# Altium schematic symbol library Module.SchLib: 74 symbols (part 1 of 2)
Pins are listed as number, name and electrical type; pins without a type are passive.

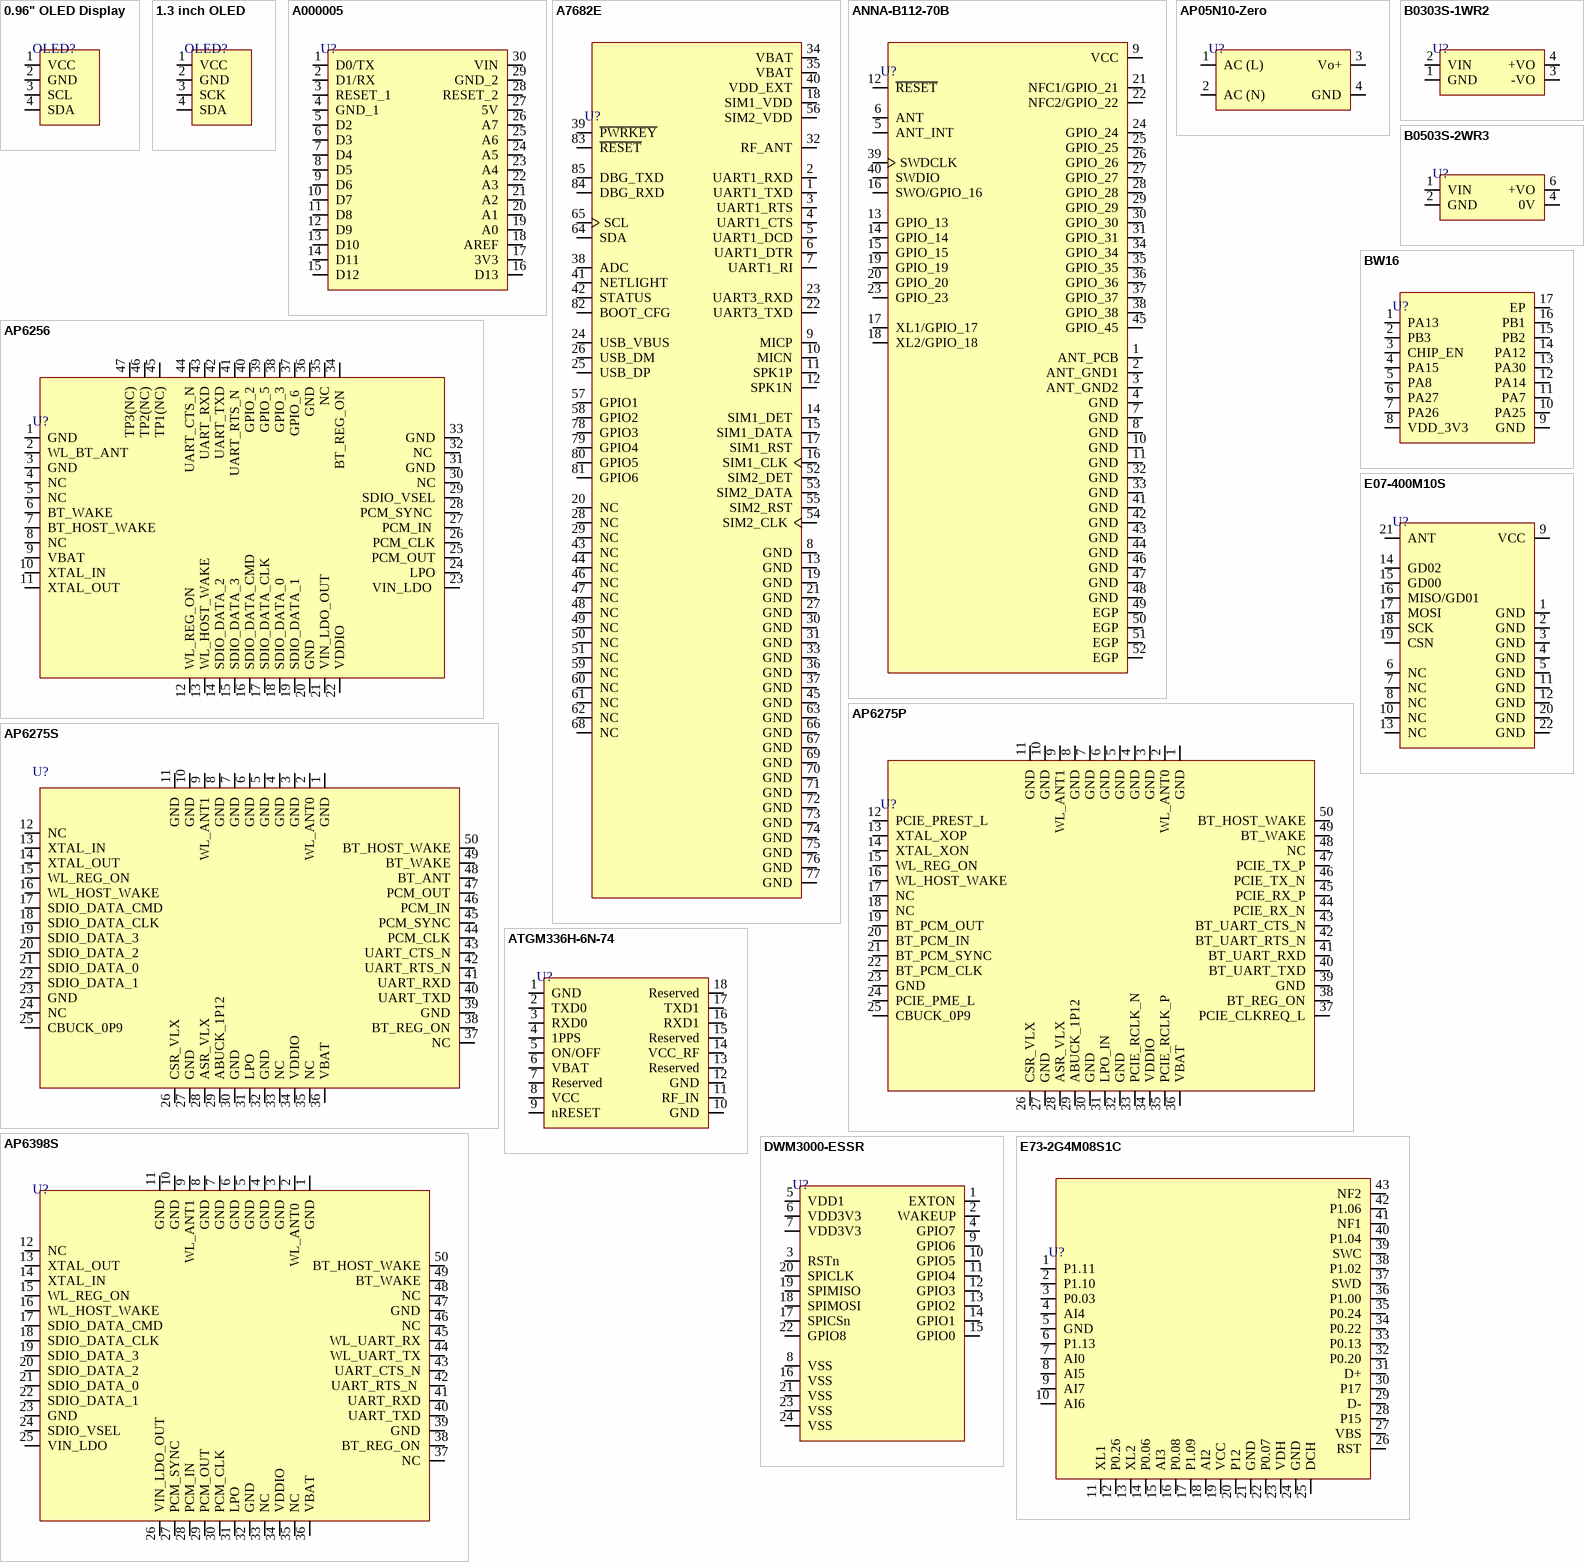
[diagram p0: symbols 0.96" OLED Display to E73-2G4M08S1C]

## 0.96" OLED Display
designator OLED?
I2C OLED Display 0.96 Inch IIC Serial LCD LED Module SSD1306 128 64 for Arduino with 40 Pcs Dupont Wire; Manufacturer Part Number: 0.96" OLED Display; Item Type: OLED; ComponentLink1Description: Aliexpress; ComponentLink1URL: https://vi.aliexpress.com/item/1005007145622546.html?spm=a2g0o.productlist.main.31.191ecGg5cGg5Vo&algo_pvid=734ed015-5a8d-442c-8838-5fb60f8c4b05&algo_exp_id=734ed015-5a8d-442c-8838-5fb60f8c4b05-15&pdp_npi=4%40dis%21USD%213.94%213.94%21%21%213.94%213.94%21%402140fc6217271814451083433ed7cc%2112000039574429519%21sea%21PK%214250221299%21ABX&curPageLogUid=5D6FHinni0Dx&utparam-url=scene%3Asearch%7Cquery_from%3A&_gl=1*we3vq3*_gcl_aw*R0NMLjE3MjE4MTcxNTQuQ2p3S0NBand6SUsxQmhBdUVpd0FIUW1VM3MxZTJwekJsSnhYVTZ1clpiVGsxRUZMR0dENnRtenFmamZ3OHkwcXE1cWZubWlHVnVlT05Cb0NySlVRQXZEX0J3RQ..*_gcl_au*MTUzMTk4MjEwNy4xNzI0MjUyNTQ2*_ga*NTU5MzcyNzE2LjE2NzUyNjE4NTc.*_ga_VED1YSGNC7*MTcyNzE4MTA3OS4yMDYuMS4xNzI3MTgxNDQ5LjYwLjAuMA..
footprint 0.96" OLED
pins: 1 VCC, 2 GND, 3 SCL, 4 SDA

## 1.3 inch OLED
designator OLED?
1.3 inch I2C OLED Display 128x64 - Blue/Black; Manufacturer: Robolink; Manufacturer Part Number: 1.3 inch OLED; Item Type: OLED Display
footprint 1.3" inch OLED
pins: 1 VCC, 2 GND, 3 SCK, 4 SDA

## A000005
designator U?
ARDUINO NANO ATMEGA328 EVAL BRD; Manufacturer Part Number: A000005; Item Type: Module; Frequency: 16MHz; Memory Format: 4498,11064MemoryType; Max Supply Voltage: 12V; Memory Size: 32KB; Min Supply Voltage: 7V; Nominal Supply Current: 19mA; Number of I/Os: 22NUMBER; Supplier: Digikey; Supplier Part Number: 1050-1001-ND; Manufacturer: Arduino; RoHS: Yes; Stock: 2276; Pricing: 1=24.9 (USD); ComponentLink1URL: https://datasheet.ciiva.com/1414/810078-1414124.pdf?src-supplier=Newark; ComponentLink1Description: https://datasheet.ciiva.com/1414/810078-1414124.pdf?src-supplier=Newark; ComponentLink2URL: https://datasheet.ciiva.com/4926/arduino-arduinoboardnano-188748-4926316.pdf?src-supplier=Mouser; ComponentLink2Description: https://datasheet.ciiva.com/4926/arduino-arduinoboardnano-188748-4926316.pdf?src-supplier=Mouser; ComponentLink3URL: https://datasheet.ciiva.com/2398/arduinonanomanual23-2398236.pdf?src-supplier=Digikey; ComponentLink3Description: https://datasheet.ciiva.com/2398/arduinonanomanual23-2398236.pdf?src-supplier=Digikey; ComponentLink4URL: https://datasheet.ciiva.com/1336/1682238-1336473.pdf?src-supplier=Element14; ComponentLink4Description: https://datasheet.ciiva.com/1336/1682238-1336473.pdf?src-supplier=Element14; ComponentLink5URL: https://datasheet.ciiva.com/19455/2121148-19455443.pdf?src-supplier=Jameco; ComponentLink5Description: https://datasheet.ciiva.com/19455/2121148-19455443.pdf?src-supplier=Jameco
footprint A000005
pins: 1 D0/TX, 2 D1/RX, 3 RESET_1, 4 GND_1, 5 D2, 6 D3, 7 D4, 8 D5, 9 D6, 10 D7, 11 D8, 12 D9, 13 D10, 14 D11, 15 D12, 16 D13, 17 3V3, 18 AREF, 19 A0, 20 A1, 21 A2, 22 A3, 23 A4, 24 A5, 25 A6, 26 A7, 27 5V, 28 RESET_2, 29 GND_2, 30 VIN

## A7682E
designator U?
LGA-85_19.6x19.6x1.10P RF Modules ROHS; Manufacturer: SIMCom Wireless Solutions; Manufacturer Part Number: A7682E; Item Type: Module; Package: LGA-85_19.6x19.6x1.10P; LCSC Part Number: C5362858; ComponentLink1Description: LCSC; ComponentLink1URL: https://www.lcsc.com/product-detail/RF-Modules_SIMCom-Wireless-Solutions-A7682E_C5362858.html
footprint A7682E
pins: 1 UART1_TXD, 2 UART1_RXD, 3 UART1_RTS, 4 UART1_CTS, 5 UART1_DCD, 6 UART1_DTR, 7 UART1_RI, 8 GND, 9 MICP, 10 MICN, 11 SPK1P, 12 SPK1N, 13 GND, 14 SIM1_DET, 15 SIM1_DATA, 16 SIM1_CLK, 17 SIM1_RST, 18 SIM1_VDD, 19 GND, 20 NC, 21 GND, 22 UART3_TXD, 23 UART3_RXD, 24 USB_VBUS, 25 USB_DP, 26 USB_DM, 27 GND, 28 NC, 29 NC, 30 GND, 31 GND, 32 RF_ANT, 33 GND, 34 VBAT, 35 VBAT, 36 GND, 37 GND, 38 ADC, 39 ~{PWRKEY}, 40 VDD_EXT, 41 NETLIGHT, 42 STATUS, 43 NC, 44 NC, 45 GND, 46 NC, 47 NC, 48 NC, 49 NC, 50 NC, 51 NC, 52 SIM2_DET, 53 SIM2_DATA, 54 SIM2_CLK, 55 SIM2_RST, 56 SIM2_VDD, 57 GPIO1, 58 GPIO2, 59 NC, 60 NC, 61 NC, 62 NC, 63 GND, 64 SDA, 65 SCL, 66 GND, 67 GND, 68 NC, 69 GND, 70 GND, 71 GND, 72 GND, 73 GND, 74 GND, 75 GND, 76 GND, 77 GND, 78 GPIO3, 79 GPIO4, 80 GPIO5, 81 GPIO6, 82 BOOT_CFG, 83 ~{RESET}, 84 DBG_RXD, 85 DBG_TXD

## ANNA-B112-70B
designator U?
RF TXRX MOD BLUETOOTH CHIP SMD; Manufacturer: u-blox; Manufacturer Part Number: ANNA-B112-70B; Item Type: Module; Supplier: Mouser; LCSC Part Number: C5451782; RoHS: No; Stock: 1511; Pricing: 1=7.09, 10=7.09, 50=7.09, 100=7.09, 1000=7.09, 10000=7.09 (USD)
footprint ANNA-B112-70B
pins: 1 ANT_PCB, 2 ANT_GND1, 3 ANT_GND2, 4 GND, 5 ANT_INT, 6 ANT, 7 GND, 8 GND, 9 VCC, 10 GND, 11 GND, 12 ~{RESET}, 13 GPIO_13, 14 GPIO_14, 15 GPIO_15, 16 SWO/GPIO_16, 17 XL1/GPIO_17, 18 XL2/GPIO_18, 19 GPIO_19, 20 GPIO_20, 21 NFC1/GPIO_21, 22 NFC2/GPIO_22, 23 GPIO_23, 24 GPIO_24, 25 GPIO_25, 26 GPIO_26, 27 GPIO_27, 28 GPIO_28, 29 GPIO_29, 30 GPIO_30, 31 GPIO_31, 32 GND, 33 GND, 34 GPIO_34, 35 GPIO_35, 36 GPIO_36, 37 GPIO_37, 38 GPIO_38, 39 SWDCLK, 40 SWDIO, 41 GND, 42 GND, 43 GND, 44 GND, 45 GPIO_45, 46 GND, 47 GND, 48 GND, 49 EGP, 50 EGP, 51 EGP, 52 EGP

## AP05N10-Zero
designator U?
5V 85VAC~265VAC 2000mA 100V~370V 10W AC/DC-DC 80% Plugin Power Modules ROHS; Manufacturer: HIECUBE; Manufacturer Part Number: AP05N10-Zero; Package: Plugin; LCSC Part Number: C355011; Item Type: Power Module; ComponentLink1Description: LCSC; ComponentLink1URL: https://www.lcsc.com/product-detail/Power-Modules_HIECUBE-AP05N10-Zero_C355011.html
footprint AP05N10-Zero
pins: 1 AC (L), 2 AC (N), 3 Vo+, 4 GND

## AP6256
designator U?
802.11ac/a/b/g/n WiFi Combo Sip Module (WiFi 5), 1T1R; Manufacturer: SparkLan; Manufacturer Part Number: AP6256; Item Type: IC; Footprint: Custom; ComponentLink1Description: Sparklan; ComponentLink1URL: https://www.sparklan.com/product/ap6256-broadcom-bcm43435-sip-module/
footprint AP6256_
pins: 1 GND, 2 WL_BT_ANT, 3 GND, 4 NC, 5 NC, 6 BT_WAKE , 7 BT_HOST_WAKE, 8 NC, 9 VBAT, 10 XTAL_IN , 11 XTAL_OUT, 12 WL_REG_ON, 13 WL_HOST_WAKE, 14 SDIO_DATA_2, 15 SDIO_DATA_3, 16 SDIO_DATA_CMD, 17 SDIO_DATA_CLK, 18 SDIO_DATA_0, 19 SDIO_DATA_1, 20 GND, 21 VIN_LDO_OUT, 22 VDDIO, 23 VIN_LDO , 24 LPO, 25 PCM_OUT, 26 PCM_CLK, 27 PCM_IN , 28 PCM_SYNC , 29 SDIO_VSEL, 30 NC, 31 GND, 32 NC , 33 GND, 34 BT_REG_ON , 35 NC, 36 GND, 37 GPIO_6 , 38 GPIO_3, 39 GPIO_5, 40 GPIO_2, 41 UART_RTS_N , 42 UART_TXD, 43 UART_RXD, 44 UART_CTS_N, 45 TP1(NC), 46 TP2(NC), 47 TP3(NC)

## AP6275P
designator U?
-90dBm 16dBm 2.4GHz - WiFi Modules ROHS; Manufacturer: AMPAK Tech; Manufacturer Part Number: AP6275P; Item Type: Module; Package: Custom; LCSC Part Number: C2984107; ComponentLink1Description: LCSC; ComponentLink1URL: https://www.lcsc.com/product-detail/WiFi-Modules_AMPAK-Tech-AP6275P_C2984107.html
footprint AP6275P_
pins: 1 GND, 2 WL_ANT0, 3 GND, 4 GND, 5 GND, 6 GND, 7 GND, 8 GND, 9 WL_ANT1, 10 GND, 11 GND, 12 PCIE_PREST_L, 13 XTAL_XOP, 14 XTAL_XON, 15 WL_REG_ON, 16 WL_HOST_WAKE, 17 NC, 18 NC, 19 BT_PCM_OUT, 20 BT_PCM_IN, 21 BT_PCM_SYNC, 22 BT_PCM_CLK, 23 GND, 24 PCIE_PME_L, 25 CBUCK_0P9, 26 CSR_VLX, 27 GND, 28 ASR_VLX, 29 ABUCK_1P12, 30 GND, 31 LPO_IN, 32 GND, 33 PCIE_RCLK_N, 34 VDDIO, 35 PCIE_RCLK_P, 36 VBAT, 37 PCIE_CLKREQ_L, 38 BT_REG_ON, 39 GND, 40 BT_UART_TXD, 41 BT_UART_RXD, 42 BT_UART_RTS_N, 43 BT_UART_CTS_N, 44 PCIE_RX_N, 45 PCIE_RX_P, 46 PCIE_TX_N, 47 PCIE_TX_P, 48 NC, 49 BT_WAKE, 50 BT_HOST_WAKE

## AP6275S
designator U?
-86dBm 14dBm 2.4GHz - WiFi Modules ROHS; Manufacturer: AMPAK Tech; Manufacturer Part Number: AP6275S; Item Type: Module; Package: Custom; LCSC Part Number: C2918717; ComponentLink1Description: LCSC; ComponentLink1URL: https://www.lcsc.com/product-detail/WiFi-Modules_AMPAK-Tech-AP6275S_C2918717.html
footprint AP6275S_
pins: 1 GND, 2 WL_ANT0, 3 GND, 4 GND, 5 GND, 6 GND, 7 GND, 8 GND, 9 WL_ANT1, 10 GND, 11 GND, 12 NC, 13 XTAL_IN, 14 XTAL_OUT, 15 WL_REG_ON, 16 WL_HOST_WAKE, 17 SDIO_DATA_CMD, 18 SDIO_DATA_CLK, 19 SDIO_DATA_3, 20 SDIO_DATA_2, 21 SDIO_DATA_0, 22 SDIO_DATA_1, 23 GND, 24 NC, 25 CBUCK_0P9, 26 CSR_VLX, 27 GND, 28 ASR_VLX, 29 ABUCK_1P12, 30 GND, 31 LPO, 32 GND, 33 NC, 34 VDDIO, 35 NC, 36 VBAT, 37 NC, 38 BT_REG_ON, 39 GND, 40 UART_TXD, 41 UART_RXD, 42 UART_RTS_N, 43 UART_CTS_N, 44 PCM_CLK, 45 PCM_SYNC, 46 PCM_IN, 47 PCM_OUT, 48 BT_ANT, 49 BT_WAKE, 50 BT_HOST_WAKE

## AP6398S
designator U?
802.11ac/a/b/g/n 2x2 WiFi with Bluetooth5.0 Combo SIP Module; Manufacturer: SparkLAN; Manufacturer Part Number: AP6398S; Item Type: IC; Footprint: Custom; ComponentLink1Description: Verical; ComponentLink1URL: https://www.verical.com/pd/sparklan-communicationslnc.-combo-wireless-module-ap6398s-7079266?utm_medium=datasheet&utm_source=pdf&utm_content=link&utm_term=AP6398S&utm_campaign=datasheet_coverpage_2017
footprint AP6398S_
pins: 1 GND, 2 WL_ANT0 , 3 GND, 4 GND, 5 GND, 6 GND, 7 GND, 8 GND, 9 WL_ANT1, 10 GND, 11 GND, 12 NC, 13 XTAL_OUT, 14 XTAL_IN, 15 WL_REG_ON , 16 WL_HOST_WAKE, 17 SDIO_DATA_CMD, 18 SDIO_DATA_CLK , 19 SDIO_DATA_3, 20 SDIO_DATA_2, 21 SDIO_DATA_0, 22 SDIO_DATA_1, 23 GND, 24 SDIO_VSEL , 25 VIN_LDO, 26 VIN_LDO_OUT, 27 PCM_SYNC , 28 PCM_IN, 29 PCM_OUT, 30 PCM_CLK , 31 LPO , 32 GND, 33 NC, 34 VDDIO , 35 NC, 36 VBAT , 37 NC, 38 BT_REG_ON, 39 GND, 40 UART_TXD, 41 UART_RXD, 42 UART_RTS_N , 43 UART_CTS_N, 44 WL_UART_TX, 45 WL_UART_RX, 46 NC, 47 GND, 48 NC, 49 BT_WAKE, 50 BT_HOST_WAKE

## ATGM336H-6N-74
designator U?
SMD,10.1x9.7mm Satellite Positioning Modules ROHS; Manufacturer: ZHONGKEWEI; Manufacturer Part Number: ATGM336H-6N-74; Package: SMD,10.1x9.7mm; LCSC Part Number: C5804601; ComponentLink1Description: LCSC; ComponentLink1URL: https://www.lcsc.com/product-detail/Satellite-Positioning-Modules_ZHONGKEWEI-ATGM336H-6N-74_C5804601.html
footprint ATGM336H-6N-74
pins: 1 GND, 2 TXD0, 3 RXD0, 4 1PPS, 5 ON/OFF, 6 VBAT, 7 Reserved, 8 VCC, 9 nRESET, 10 GND, 11 RF_IN, 12 GND, 13 Reserved, 14 VCC_RF, 15 Reserved, 16 RXD1, 17 TXD1, 18 Reserved

## B0303S-1WR2
designator U?
Plugin Isolated Power Modules ROHS; Manufacturer: YLPTEC; Manufacturer Part Number: B0303S-1WR2; Package: Plugin; LCSC Part Number: C2992399; Item Type: Power Module; ComponentLink1Description: LCSC; ComponentLink1URL: https://www.lcsc.com/product-detail/Isolated-Power-Modules_YLPTEC-B0303S-1WR2_C2992399.html
footprint B0303S-1WR2
pins: 1 GND, 2 VIN, 3 -VO, 4 +VO

## B0503S-2WR3
designator U?
SIP-4 Isolated Power Modules ROHS; Manufacturer: YLPTEC; Manufacturer Part Number: B0503S-2WR3; Item Type: Module; Package: SIP-4; LCSC Part Number: C5369472; ComponentLink1Description: LCSC; ComponentLink1URL: https://www.lcsc.com/product-detail/Isolated-Power-Modules_YLPTEC-B0503S-2WR3_C5369472.html?s_z=n_B0503S-2WR3
footprint B0503S-2WR3
pins: 1 VIN, 2 GND, 4 0V, 6 +VO

## BW16
designator U?
-90dBm 16dBm RTL8720DN Chip On-Board PCB Antenna 2.4GHz SMD,16x24mm WiFi Modules ROHS; Manufacturer: Ai-Thinker; Manufacturer Part Number: BW16; Package: SMD,16x24mm; LCSC Part Number: C2764067; Item Type: WiFi Module; ComponentLink1Description: LCSC; ComponentLink1URL: https://www.lcsc.com/product-detail/WiFi-Modules_Ai-Thinker-BW16_C2764067.html
footprint BW16
pins: 1 PA13, 2 PB3, 3 CHIP_EN, 4 PA15, 5 PA8, 6 PA27, 7 PA26, 8 VDD_3V3, 9 GND, 10 PA25, 11 PA7, 12 PA14, 13 PA30, 14 PA12, 15 PB2, 16 PB1, 17 EP

## DWM3000-ESSR
designator U?
RF Modules ENGINEERING SAMPLE; Manufacturer: Qorvo; Manufacturer Part Number: DWM3000-ESSR; Item Type: Module; Supplier 1: Mouser; Stock 1: 282; Pricing 1: 1=24, 10=24, 25=19.44, 50=19.44, 100=14.9, 1000=14.9, 10000=14.9 (USD); Supplier Part Number 1: 772-DWM3000-ESSR; ComponentLink1Description: LCSC; ComponentLink1URL: https://eu.mouser.com/ProductDetail/Qorvo/DWM3000-ESSR?qs=DPoM0jnrROUKQ7mLMYYEbQ%3D%3D
footprint DWM3000_ESSR
pins: 1 EXTON, 2 WAKEUP, 3 RSTn, 4 GPIO7, 5 VDD1, 6 VDD3V3, 7 VDD3V3, 8 VSS, 9 GPIO6, 10 GPIO5, 11 GPIO4, 12 GPIO3, 13 GPIO2, 14 GPIO1, 15 GPIO0, 16 VSS, 17 SPICSn, 18 SPIMOSI, 19 SPIMISO, 20 SPICLK, 21 VSS, 22 GPIO8, 23 VSS, 24 VSS

## E07-400M10S
designator U?
RF Modules ROHS; Manufacturer: Chengdu Ebyte Elec Tech; Manufacturer Part Number: E07-400M10S; Item Type: Module; Package: Custom; LCSC Part Number: C2965513; ComponentLink1Description: LCSC; ComponentLink1URL: https://www.lcsc.com/product-detail/RF-Modules_Chengdu-Ebyte-Elec-Tech-E07-400M10S_C2965513.html
footprint E07-400M10S
pins: 1 GND, 2 GND, 3 GND, 4 GND, 5 GND, 6 NC, 7 NC, 8 NC, 9 VCC, 10 NC, 11 GND, 12 GND, 13 NC, 14 GD02, 15 GD00, 16 MISO/GD01, 17 MOSI, 18 SCK, 19 CSN, 20 GND, 21 ANT, 22 GND

## E73-2G4M08S1C
designator U?
Bluetooth Modules ROHS; Manufacturer: Chengdu Ebyte Elec Tech; Manufacturer Part Number: E73-2G4M08S1C; Item Type: Module; Package: Custom; LCSC Part Number: C356849; ComponentLink1Description: LCSC; ComponentLink1URL: https://www.lcsc.com/product-detail/Bluetooth-Modules_Chengdu-Ebyte-Elec-Tech-E73-2G4M08S1C_C356849.html?s_z=n_E73-2G4M08S1C
footprint E73-2G4M08S1C
pins: 1 P1.11, 2 P1.10, 3 P0.03, 4 AI4, 5 GND, 6 P1.13, 7 AI0, 8 AI5, 9 AI7, 10 AI6, 11 XL1, 12 P0.26, 13 XL2, 14 P0.06, 15 AI3, 16 P0.08, 17 P1.09, 18 AI2, 19 VCC, 20 P12, 21 GND, 22 P0.07, 23 VDH, 24 GND, 25 DCH, 26 RST, 27 VBS, 28 P15, 29 D-, 30 P17, 31 D+, 32 P0.20, 33 P0.13, 34 P0.22, 35 P0.24, 36 P1.00, 37 SWD, 38 P1.02, 39 SWC, 40 P1.04, 41 NF1, 42 P1.06, 43 NF2

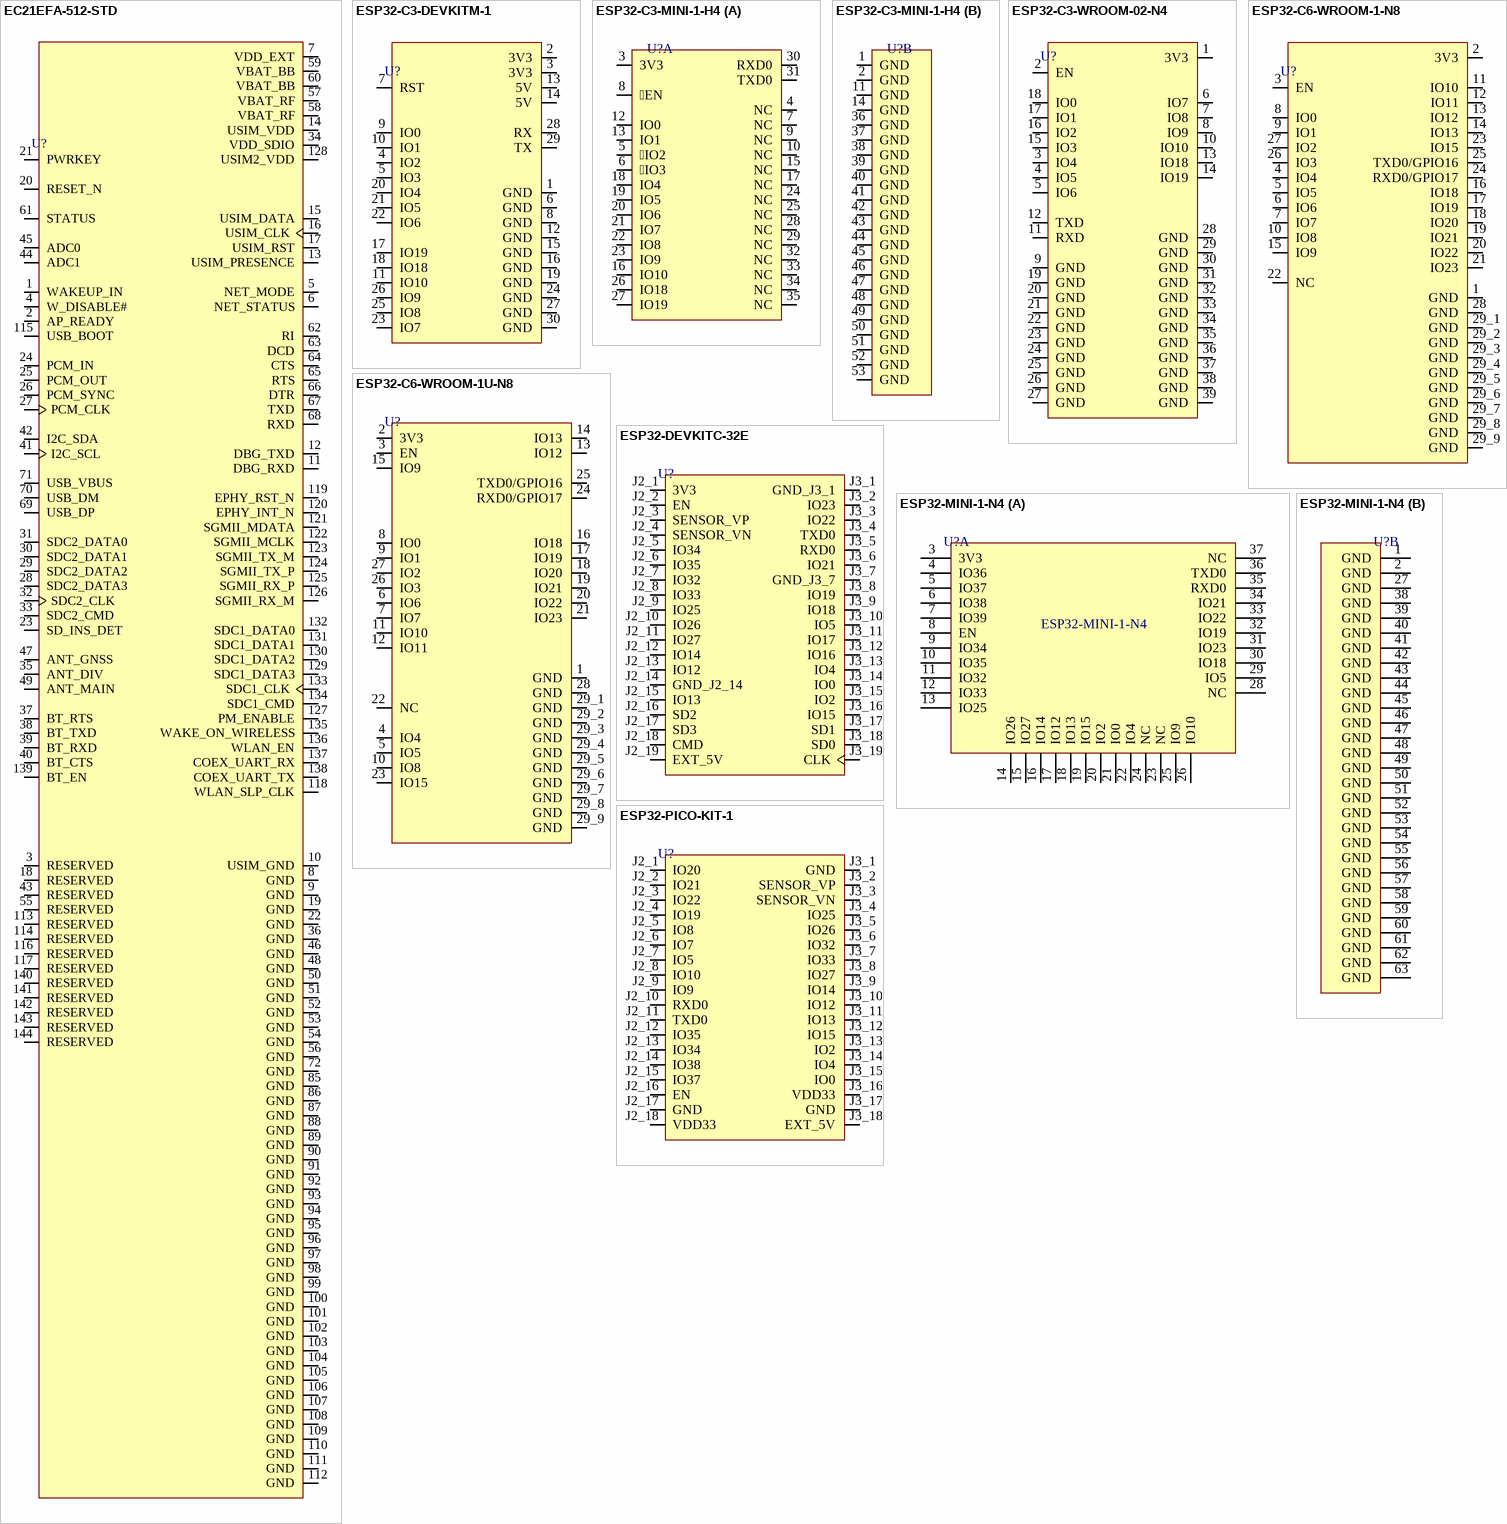
[diagram p1: symbols EC21EFA-512-STD to ESP32-PICO-KIT-1]

## EC21EFA-512-STD
designator U?
RF TXRX MOD CELLULARCARD EDGE; Manufacturer: Quectel Wireless Solutions; Manufacturer Part Number: EC21EFA-512-STD; Item Type: IC; Supplier: Mouser; Supplier Part Number: 277-EC21EFA-512-STD; RoHS: No; Stock: 210; Pricing: 1=59.46, 10=47.77, 50=42.24, 100=40.31, 1000=38.16, 10000=38.16 (USD); ComponentLink1URL: https://datasheet.octopart.com/EC21EFA-512-STD-Quectel-datasheet-163886073.pdf?src-supplier=SOS+electronic; ComponentLink1Description: https://datasheet.octopart.com/EC21EFA-512-STD-Quectel-datasheet-163886073.pdf?src-supplier=SOS+electronic
footprint EC21EFA-512-STD
pins: 1 WAKEUP_IN, 2 AP_READY, 3 RESERVED, 4 W_DISABLE#, 5 NET_MODE, 6 NET_STATUS, 7 VDD_EXT, 8 GND, 9 GND, 10 USIM_GND, 11 DBG_RXD, 12 DBG_TXD, 13 USIM_PRESENCE, 14 USIM_VDD, 15 USIM_DATA, 16 USIM_CLK, 17 USIM_RST, 18 RESERVED, 19 GND, 20 RESET_N, 21 PWRKEY, 22 GND, 23 SD_INS_DET, 24 PCM_IN, 25 PCM_OUT, 26 PCM_SYNC, 27 PCM_CLK, 28 SDC2_DATA3, 29 SDC2_DATA2, 30 SDC2_DATA1, 31 SDC2_DATA0, 32 SDC2_CLK, 33 SDC2_CMD, 34 VDD_SDIO, 35 ANT_DIV, 36 GND, 37 BT_RTS, 38 BT_TXD, 39 BT_RXD, 40 BT_CTS, 41 I2C_SCL, 42 I2C_SDA, 43 RESERVED, 44 ADC1, 45 ADC0, 46 GND, 47 ANT_GNSS, 48 GND, 49 ANT_MAIN, 50 GND, 51 GND, 52 GND, 53 GND, 54 GND, 55 RESERVED, 56 GND, 57 VBAT_RF, 58 VBAT_RF, 59 VBAT_BB, 60 VBAT_BB, 61 STATUS, 62 RI, 63 DCD, 64 CTS, 65 RTS, 66 DTR, 67 TXD, 68 RXD, 69 USB_DP, 70 USB_DM, 71 USB_VBUS, 72 GND, 85 GND, 86 GND, 87 GND, 88 GND, 89 GND, 90 GND, 91 GND, 92 GND, 93 GND, 94 GND, 95 GND, 96 GND, 97 GND, 98 GND, 99 GND, 100 GND, 101 GND, 102 GND, 103 GND, 104 GND, 105 GND, 106 GND, 107 GND, 108 GND, 109 GND, 110 GND, 111 GND, 112 GND, 113 RESERVED, 114 RESERVED, 115 USB_BOOT, 116 RESERVED, 117 RESERVED, 118 WLAN_SLP_CLK, 119 EPHY_RST_N, 120 EPHY_INT_N, 121 SGMII_MDATA, 122 SGMII_MCLK, 123 SGMII_TX_M, 124 SGMII_TX_P, 125 SGMII_RX_P, 126 SGMII_RX_M, 127 PM_ENABLE, 128 USIM2_VDD, 129 SDC1_DATA3, 130 SDC1_DATA2, 131 SDC1_DATA1, 132 SDC1_DATA0, 133 SDC1_CLK, 134 SDC1_CMD, 135 WAKE_ON_WIRELESS, 136 WLAN_EN, 137 COEX_UART_RX, 138 COEX_UART_TX, 139 BT_EN, 140 RESERVED, 141 RESERVED, 142 RESERVED, 143 RESERVED, 144 RESERVED

## ESP32-C3-DEVKITM-1
designator U?
ESP32-C3-MINI-1 DEV BRD; Manufacturer: Espressif Systems; Manufacturer Part Number: ESP32-C3-DEVKITM-1; Item Type: Evalution Board; Supplier: Digikey; Supplier Part Number: 1965-ESP32-C3-DEVKITM-1-ND; RoHS: No; Stock: 609; Pricing: 1=8 (USD); ComponentLink1URL: https://datasheet.octopart.com/ESP32-C3-DEVKITM-1-Espressif-Systems-datasheet-165560559.pdf?src-supplier=TME; ComponentLink1Description: https://datasheet.octopart.com/ESP32-C3-DEVKITM-1-Espressif-Systems-datasheet-165560559.pdf?src-supplier=TME
footprint ESP32-C3-DEVKITM-1
pins: 1 GND, 2 3V3, 3 3V3, 4 IO2, 5 IO3, 6 GND, 7 RST, 8 GND, 9 IO0, 10 IO1, 11 IO10, 12 GND, 13 5V, 14 5V, 15 GND, 16 GND, 17 IO19, 18 IO18, 19 GND, 20 IO4, 21 IO5, 22 IO6, 23 IO7, 24 GND, 25 IO8, 26 IO9, 27 GND, 28 RX, 29 TX, 30 GND

## ESP32-C3-MINI-1-H4
designator U?
RF TXRX MODULE BT PCB TRACE SMD; Manufacturer: Espressif Systems; Manufacturer Part Number: ESP32-C3-MINI-1-H4; Package: SMD,13.2x16.6mm; LCSC Part Number: C2934569; Item Type: Module; ComponentLink1Description: LCSC; ComponentLink1URL: https://www.lcsc.com/product-detail/WiFi-Modules_Espressif-Systems-ESP32-C3-MINI-1-H4_C2934569.html; Supplier: Digi-Key; Supplier Part Number: 1965-ESP32-C3-MINI-1-H4CT-ND; RoHS: No; Category: Uncategorized; Stock: 35793; Pricing: 1=1.9 (USD)
footprint ESP32-C3-MINI-1-H4
part A pins: 3 3V3, 4 NC, 5 IO2, 6 IO3, 7 NC, 8 EN, 9 NC, 10 NC, 12 IO0, 13 IO1, 15 NC, 16 IO10, 17 NC, 18 IO4, 19 IO5, 20 IO6, 21 IO7, 22 IO8, 23 IO9, 24 NC, 25 NC, 26 IO18, 27 IO19, 28 NC, 29 NC, 30 RXD0, 31 TXD0, 32 NC, 33 NC, 34 NC, 35 NC
part B pins: 1 GND, 2 GND, 11 GND, 14 GND, 36 GND, 37 GND, 38 GND, 39 GND, 40 GND, 41 GND, 42 GND, 43 GND, 44 GND, 45 GND, 46 GND, 47 GND, 48 GND, 49 GND, 50 GND, 51 GND, 52 GND, 53 GND

## ESP32-C3-WROOM-02-N4
designator U?
RF TXRX MOD BT WIFI PCB TH SMD; Manufacturer: Espressif Systems; Manufacturer Part Number: ESP32-C3-WROOM-02-N4; Item Type: Module; Interface: 39,40,224,1514,1518,1532Interface; Bandwidth: 72MHz; Data Rate: 150Mbps; Clock Frequency: 2.484GHz; Max Supply Voltage: 3.6V; Min Supply Voltage: 3V; Number of GPIO: 15NUMBER; Supplier: Digikey; LCSC Part Number: C2934560; RoHS: No; Pricing: 1=3.28, 10=2.836, 25=2.6796, 100=2.4652, 250=2.33652 (USD); Min Operating Temperature: -40°C; Max Operating Temperature: 85°C; Height: 3.35mm; ComponentLink1URL: https://datasheet.octopart.com/ESP32-C3-WROOM-02-N4-Espressif-Systems-datasheet-165560559.pdf?src-supplier=TME; ComponentLink1Description: https://datasheet.octopart.com/ESP32-C3-WROOM-02-N4-Espressif-Systems-datasheet-165560559.pdf?src-supplier=TME
footprint ESP32-C3-WROOM-02-N4
pins: 1 3V3, 2 EN, 3 IO4, 4 IO5, 5 IO6, 6 IO7, 7 IO8, 8 IO9, 9 GND, 10 IO10, 11 RXD, 12 TXD, 13 IO18, 14 IO19, 15 IO3, 16 IO2, 17 IO1, 18 IO0, 19 GND, 20 GND, 21 GND, 22 GND, 23 GND, 24 GND, 25 GND, 26 GND, 27 GND, 28 GND, 29 GND, 30 GND, 31 GND, 32 GND, 33 GND, 34 GND, 35 GND, 36 GND, 37 GND, 38 GND, 39 GND

## ESP32-C6-WROOM-1-N8
designator U?
RF TXRX MOD BT WIFI PCB TH SMD; Manufacturer: Espressif Systems; Manufacturer Part Number: ESP32-C6-WROOM-1-N8; Item Type: Module; Supplier: Digikey; LCSC Part Number: C5366877; RoHS: No; Stock: 1100; Pricing: 1=5.38, 10=4.66, 25=4.4084, 100=4.0625, 250=3.85516, 650=3.65551, 1300=3.52065, 1950=3.44543 (USD); ComponentLink1URL: https://datasheet.octopart.com/ESP32-C6-WROOM-1-N8-Espressif-Systems-datasheet-188867345.pdf?src-supplier=TME; ComponentLink1Description: https://datasheet.octopart.com/ESP32-C6-WROOM-1-N8-Espressif-Systems-datasheet-188867345.pdf?src-supplier=TME
footprint ESP32-C6-WROOM-1-N8
pins: 1 GND, 2 3V3, 3 EN, 4 IO4, 5 IO5, 6 IO6, 7 IO7, 8 IO0, 9 IO1, 10 IO8, 11 IO10, 12 IO11, 13 IO12, 14 IO13, 15 IO9, 16 IO18, 17 IO19, 18 IO20, 19 IO21, 20 IO22, 21 IO23, 22 NC, 23 IO15, 24 RXD0/GPIO17, 25 TXD0/GPIO16, 26 IO3, 27 IO2, 28 GND, 29_1 GND, 29_2 GND, 29_3 GND, 29_4 GND, 29_5 GND, 29_6 GND, 29_7 GND, 29_8 GND, 29_9 GND

## ESP32-C6-WROOM-1U-N8
designator U?
RF TXRX MOD BT WIFI PCB TH SMD; Manufacturer: Espressif Systems; Manufacturer Part Number: ESP32-C6-WROOM-1U-N8; Item Type: Module; Supplier: Digikey; Supplier Part Number: 1965-ESP32-C6-WROOM-1U-N8CT-ND; RoHS: No; Stock: 1394; Pricing: 1=5.43, 10=4.698, 25=4.444, 100=4.0954, 250=3.88644 (USD); ComponentLink1URL: https://datasheet.octopart.com/ESP32-C6-WROOM-1U-N8-Espressif-Systems-datasheet-188867345.pdf?src-supplier=TME; ComponentLink1Description: https://datasheet.octopart.com/ESP32-C6-WROOM-1U-N8-Espressif-Systems-datasheet-188867345.pdf?src-supplier=TME
footprint ESP32-C6-WROOM-1U-N8
pins: 1 GND, 2 3V3, 3 EN, 4 IO4, 5 IO5, 6 IO6, 7 IO7, 8 IO0, 9 IO1, 10 IO8, 11 IO10, 12 IO11, 13 IO12, 14 IO13, 15 IO9, 16 IO18, 17 IO19, 18 IO20, 19 IO21, 20 IO22, 21 IO23, 22 NC, 23 IO15, 24 RXD0/GPIO17, 25 TXD0/GPIO16, 26 IO3, 27 IO2, 28 GND, 29_1 GND, 29_2 GND, 29_3 GND, 29_4 GND, 29_5 GND, 29_6 GND, 29_7 GND, 29_8 GND, 29_9 GND

## ESP32-DEVKITC-32E
designator U?
ESP32-WROOM-32E 4MB FLASH; Manufacturer: Espressif Systems; Manufacturer Part Number: ESP32-DEVKITC-32E; Item Type: Development Kit; Frequency: 2.4GHz; Supplier: Digikey; Supplier Part Number: 1965-ESP32-DEVKITC-32E-ND; RoHS: No; Stock: 1503; Pricing: 1=10 (USD); Series: -; ComponentLink1URL: https://www.espressif.com/sites/default/files/documentation/espressif_products_ordering_information_en.pdf?src-supplier=Digikey; ComponentLink1Description: https://www.espressif.com/sites/default/files/documentation/espressif_products_ordering_information_en.pdf?src-supplier=Digikey; ComponentLink2URL: https://datasheet.octopart.com/ESP32-DEVKITC-32E-Espressif-Systems-datasheet-165560559.pdf?src-supplier=TME; ComponentLink2Description: https://datasheet.octopart.com/ESP32-DEVKITC-32E-Espressif-Systems-datasheet-165560559.pdf?src-supplier=TME
footprint ESP32-DEVKITC-32E
pins: J2_1 3V3, J2_2 EN, J2_3 SENSOR_VP, J2_4 SENSOR_VN, J2_5 IO34, J2_6 IO35, J2_7 IO32, J2_8 IO33, J2_9 IO25, J2_10 IO26, J2_11 IO27, J2_12 IO14, J2_13 IO12, J2_14 GND_J2_14, J2_15 IO13, J2_16 SD2, J2_17 SD3, J2_18 CMD, J2_19 EXT_5V, J3_1 GND_J3_1, J3_2 IO23, J3_3 IO22, J3_4 TXD0, J3_5 RXD0, J3_6 IO21, J3_7 GND_J3_7, J3_8 IO19, J3_9 IO18, J3_10 IO5, J3_11 IO17, J3_12 IO16, J3_13 IO4, J3_14 IO0, J3_15 IO2, J3_16 IO15, J3_17 SD1, J3_18 SD0, J3_19 CLK

## ESP32-MINI-1-N4
designator U?
SMD MODULE W/PCB ANT ESP-U4WDH; Manufacturer: Espressif Systems; Manufacturer Part Number: ESP32-MINI-1-N4; Supplier 1: Mouser; RoHS: No; Stock 1: 5903; Pricing 1: 1=2.48000, 10=2.48000, 50=2.48000, 100=2.48000, 1000=2.48000, 10000=2.48000 (USD); ComponentLink1Description: LCSC; ComponentLink1URL: https://www.lcsc.com/product-detail/WiFi-Modules_Espressif-Systems-ESP32-MINI-1-N4_C2980305.html; LCSC Part Number: C2980305; Item Type: Module; Supplier Part Number 1: 356-ESP32-MINI1PH3Q0
footprint ESP32-MINI-1-N4
part A pins: 3 3V3, 4 IO36, 5 IO37, 6 IO38, 7 IO39, 8 EN, 9 IO34, 10 IO35, 11 IO32, 12 IO33, 13 IO25, 14 IO26, 15 IO27, 16 IO14, 17 IO12, 18 IO13, 19 IO15, 20 IO2, 21 IO0, 22 IO4, 23 NC, 24 NC, 25 IO9, 26 IO10, 28 NC, 29 IO5, 30 IO18, 31 IO23, 32 IO19, 33 IO22, 34 IO21, 35 RXD0, 36 TXD0, 37 NC
part B pins: 1 GND, 2 GND, 27 GND, 38 GND, 39 GND, 40 GND, 41 GND, 42 GND, 43 GND, 44 GND, 45 GND, 46 GND, 47 GND, 48 GND, 49 GND, 50 GND, 51 GND, 52 GND, 53 GND, 54 GND, 55 GND, 56 GND, 57 GND, 58 GND, 59 GND, 60 GND, 61 GND, 62 GND, 63 GND

## ESP32-PICO-KIT-1
designator U?
Development Board ESP32-PICO-V3; Manufacturer: Espressif Systems; Manufacturer Part Number: ESP32-PICO-KIT-1; Supplier: Digikey; Supplier Part Number: 1965-ESP32-PICO-KIT-1-ND; RoHS: No; Item Type: Development Board; Stock: 488; Pricing: 1=10 (USD)
footprint ESP32-PICO-KIT-1
pins: J2_1 IO20, J2_2 IO21, J2_3 IO22, J2_4 IO19, J2_5 IO8, J2_6 IO7, J2_7 IO5, J2_8 IO10, J2_9 IO9, J2_10 RXD0, J2_11 TXD0, J2_12 IO35, J2_13 IO34, J2_14 IO38, J2_15 IO37, J2_16 EN, J2_17 GND, J2_18 VDD33, J3_1 GND, J3_2 SENSOR_VP, J3_3 SENSOR_VN, J3_4 IO25, J3_5 IO26, J3_6 IO32, J3_7 IO33, J3_8 IO27, J3_9 IO14, J3_10 IO12, J3_11 IO13, J3_12 IO15, J3_13 IO2, J3_14 IO4, J3_15 IO0, J3_16 VDD33, J3_17 GND, J3_18 EXT_5V

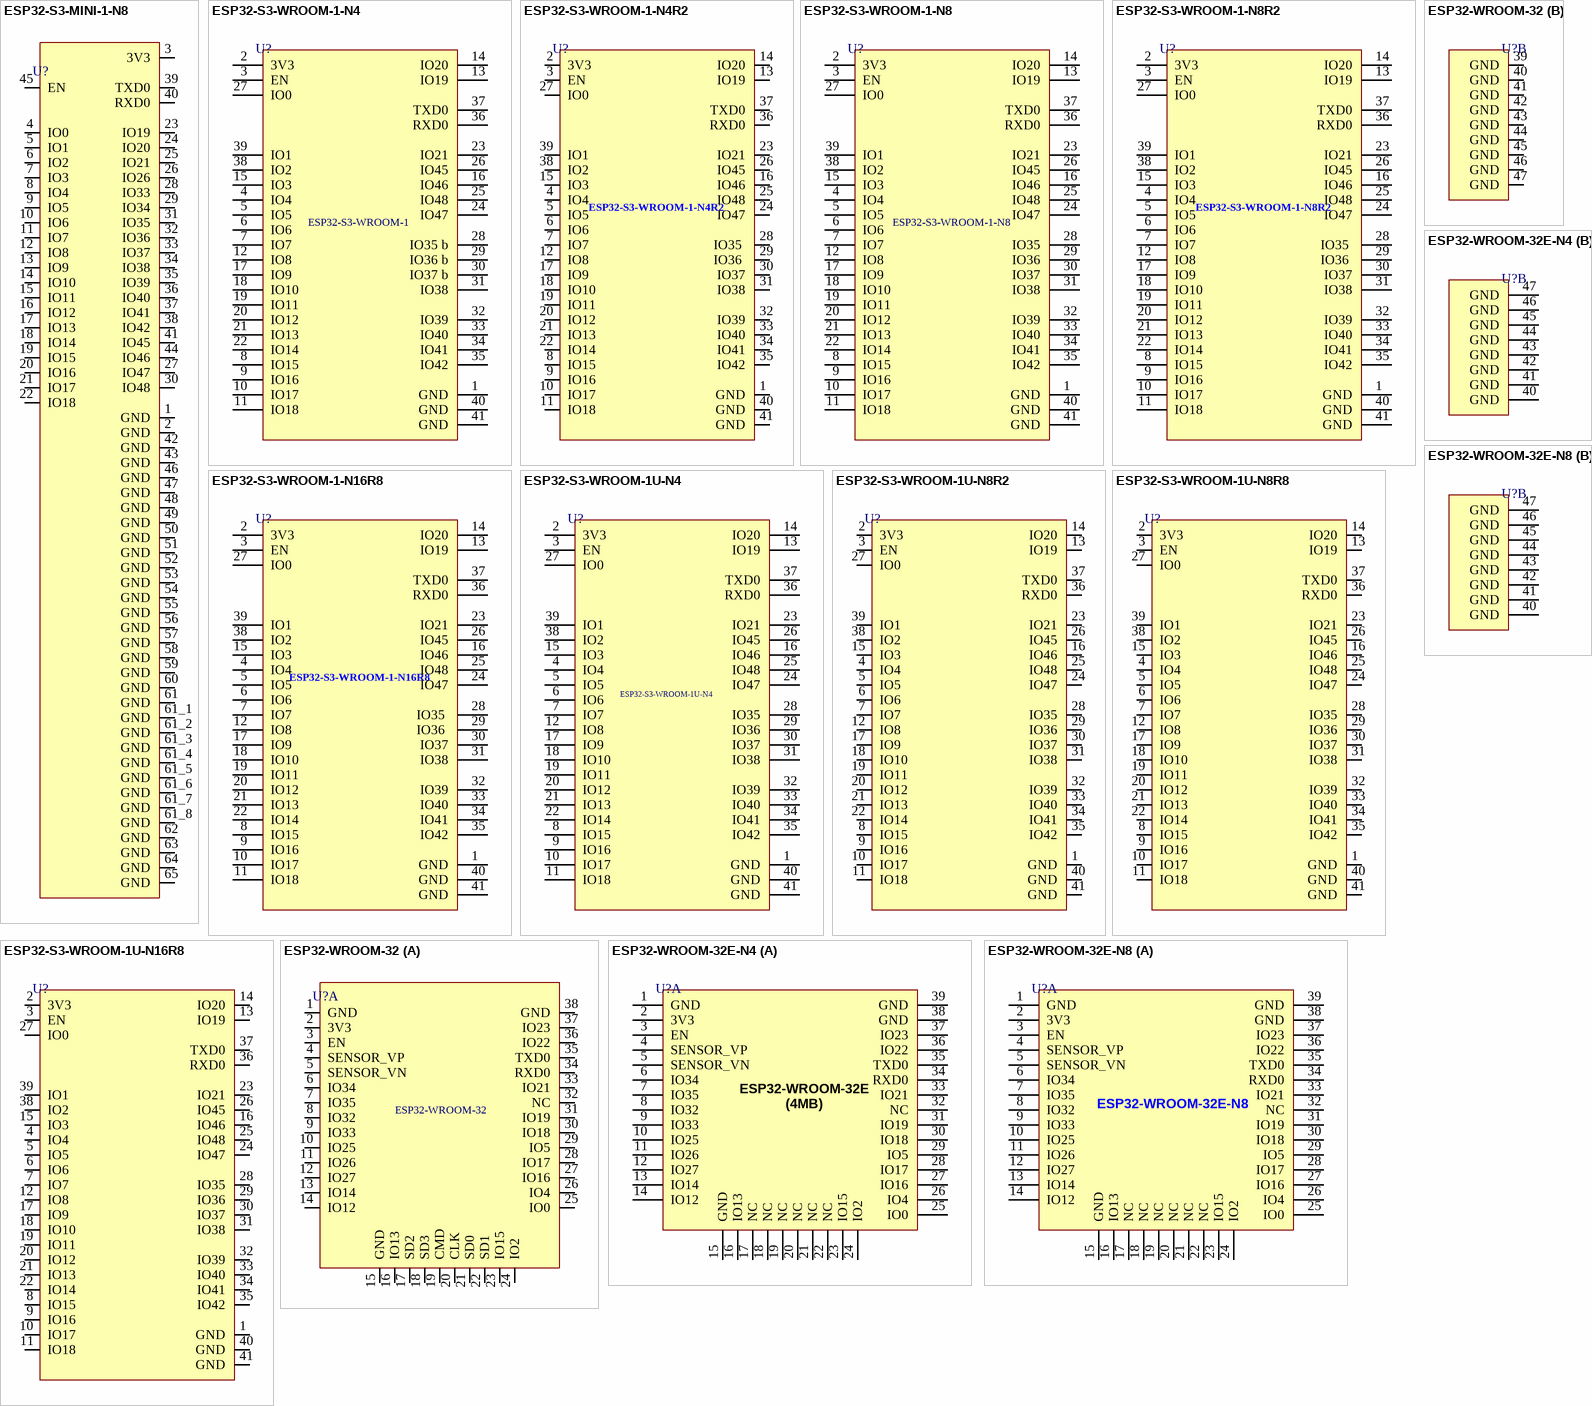
[diagram p2: symbols ESP32-S3-MINI-1-N8 to ESP32-WROOM-32E-N8]

## ESP32-S3-MINI-1-N8
designator U?
RF TXRX MOD BT WIFI PCB TH SMD; Manufacturer: Espressif Systems; Manufacturer Part Number: ESP32-S3-MINI-1-N8; Item Type: Module; Supplier: Digikey; LCSC Part Number: C2913206; RoHS: No; Pricing: 1=5.28, 10=4.566, 25=4.3196, 100=3.9802, 250=3.7768 (USD); ComponentLink1URL: https://datasheet.octopart.com/ESP32-S3-MINI-1-N8-Espressif-Systems-datasheet-165560562.pdf?src-supplier=TME; ComponentLink1Description: https://datasheet.octopart.com/ESP32-S3-MINI-1-N8-Espressif-Systems-datasheet-165560562.pdf?src-supplier=TME
footprint ESP32-S3-MINI-1-N8
pins: 1 GND, 2 GND, 3 3V3, 4 IO0, 5 IO1, 6 IO2, 7 IO3, 8 IO4, 9 IO5, 10 IO6, 11 IO7, 12 IO8, 13 IO9, 14 IO10, 15 IO11, 16 IO12, 17 IO13, 18 IO14, 19 IO15, 20 IO16, 21 IO17, 22 IO18, 23 IO19, 24 IO20, 25 IO21, 26 IO26, 27 IO47, 28 IO33, 29 IO34, 30 IO48, 31 IO35, 32 IO36, 33 IO37, 34 IO38, 35 IO39, 36 IO40, 37 IO41, 38 IO42, 39 TXD0, 40 RXD0, 41 IO45, 42 GND, 43 GND, 44 IO46, 45 EN, 46 GND, 47 GND, 48 GND, 49 GND, 50 GND, 51 GND, 52 GND, 53 GND, 54 GND, 55 GND, 56 GND, 57 GND, 58 GND, 59 GND, 60 GND, 61 GND, 61_1 GND, 61_2 GND, 61_3 GND, 61_4 GND, 61_5 GND, 61_6 GND, 61_7 GND, 61_8 GND, 62 GND, 63 GND, 64 GND, 65 GND

## ESP32-S3-WROOM-1-N4
designator U?
SMD MODULE, ESP32-S3, 4 MB SPI F; Manufacturer: Espressif Systems; Manufacturer Part Number: ESP32-S3-WROOM-1-N4; Supplier 1: Mouser; RoHS: No; Category: Uncategorized; Stock 1: 2246; Pricing 1: 1=3.15000, 10=3.15000, 50=3.15000, 100=3.15000, 1000=3.15000, 10000=3.15000 (USD); Supplier Part Number 1: 356-ESP32-S3WROOM1N4; ComponentLink1Description: LCSC; ComponentLink1URL: https://lcsc.com/product-detail/WiFi-Modules_Espressif-Systems-ESP32-S3-WROOM-1-N4_C2913197.html; LCSC Part Number: C2913197; Item Type: Module
footprint 41-SMD Module
pins: 1 GND, 2 3V3, 3 EN, 4 IO4, 5 IO5, 6 IO6, 7 IO7, 8 IO15, 9 IO16, 10 IO17, 11 IO18, 12 IO8, 13 IO19, 14 IO20, 15 IO3, 16 IO46, 17 IO9, 18 IO10, 19 IO11, 20 IO12, 21 IO13, 22 IO14, 23 IO21, 24 IO47, 25 IO48, 26 IO45, 27 IO0, 28 IO35 b, 29 IO36 b, 30 IO37 b, 31 IO38, 32 IO39, 33 IO40, 34 IO41, 35 IO42, 36 RXD0, 37 TXD0, 38 IO2, 39 IO1, 40 GND, 41 GND
text: ESP32-S3-WROOM-1

## ESP32-S3-WROOM-1-N4R2
designator U?
SMD,18x25.5mm WiFi Modules ROHS; Manufacturer: Espressif Systems; Manufacturer Part Number: ESP32-S3-WROOM-1-N4R2; Item Type: Module; RoHS: No; Category: Uncategorized; ComponentLink1Description: LCSC; ComponentLink1URL: https://www.lcsc.com/product-detail/WiFi-Modules_Espressif-Systems-ESP32-S3-WROOM-1-N4R2_C2913203.html; LCSC Part Number: C2913203; Supplier 1: Digikey; Supplier Part Number 1: 1965-ESP32-S3-WROOM-1-N4R2CT-ND
footprint 41-SMD Module
pins: 1 GND, 2 3V3, 3 EN, 4 IO4, 5 IO5, 6 IO6, 7 IO7, 8 IO15, 9 IO16, 10 IO17, 11 IO18, 12 IO8, 13 IO19, 14 IO20, 15 IO3, 16 IO46, 17 IO9, 18 IO10, 19 IO11, 20 IO12, 21 IO13, 22 IO14, 23 IO21, 24 IO47, 25 IO48, 26 IO45, 27 IO0, 28 IO35 , 29 IO36 , 30 IO37, 31 IO38, 32 IO39, 33 IO40, 34 IO41, 35 IO42, 36 RXD0, 37 TXD0, 38 IO2, 39 IO1, 40 GND, 41 GND

## ESP32-S3-WROOM-1-N8
designator U?
SMD MODULE, ESP32-S3, 8 MB SPI F; Manufacturer: Espressif Systems; Manufacturer Part Number: ESP32-S3-WROOM-1-N8; Supplier 1: Digi-Key; RoHS: No; Category: Uncategorized; Stock 1: 7933; Pricing 1: 1=3.52000 (USD); Supplier Part Number 1: 1965-ESP32-S3-WROOM-1-N8CT-ND; LCSC Part Number: C2913198; Item Type: Module; ComponentLink1Description: LCSC; ComponentLink1URL: https://www.lcsc.com/product-detail/WiFi-Modules_Espressif-Systems-ESP32-S3-WROOM-1-N8_C2913198.html
footprint 41-SMD Module
pins: 1 GND, 2 3V3, 3 EN, 4 IO4, 5 IO5, 6 IO6, 7 IO7, 8 IO15, 9 IO16, 10 IO17, 11 IO18, 12 IO8, 13 IO19, 14 IO20, 15 IO3, 16 IO46, 17 IO9, 18 IO10, 19 IO11, 20 IO12, 21 IO13, 22 IO14, 23 IO21, 24 IO47, 25 IO48, 26 IO45, 27 IO0, 28 IO35, 29 IO36, 30 IO37, 31 IO38, 32 IO39, 33 IO40, 34 IO41, 35 IO42, 36 RXD0, 37 TXD0, 38 IO2, 39 IO1, 40 GND, 41 GND

## ESP32-S3-WROOM-1-N8R2
designator U?
SMD,18x25.5mm WiFi Modules ROHS; Manufacturer: Espressif Systems; Manufacturer Part Number: ESP32-S3-WROOM-1-N8R2; Item Type: Module; Supplier 1: Digi-Key; RoHS: No; Category: Uncategorized; Supplier Part Number 1: 1965-ESP32-S3-WROOM-1-N8R2-ND; ComponentLink1Description: LCSC; ComponentLink1URL: https://www.lcsc.com/product-detail/WiFi-Modules_Espressif-Systems-ESP32-S3-WROOM-1-N8R2_C2913204.html; LCSC Part Number: C2913204
footprint 41-SMD Module
pins: 1 GND, 2 3V3, 3 EN, 4 IO4, 5 IO5, 6 IO6, 7 IO7, 8 IO15, 9 IO16, 10 IO17, 11 IO18, 12 IO8, 13 IO19, 14 IO20, 15 IO3, 16 IO46, 17 IO9, 18 IO10, 19 IO11, 20 IO12, 21 IO13, 22 IO14, 23 IO21, 24 IO47, 25 IO48, 26 IO45, 27 IO0, 28 IO35 , 29 IO36 , 30 IO37, 31 IO38, 32 IO39, 33 IO40, 34 IO41, 35 IO42, 36 RXD0, 37 TXD0, 38 IO2, 39 IO1, 40 GND, 41 GND

## ESP32-S3-WROOM-1-N16R8
designator U?
SMD MODULE, ESP32-S3R8 WITH 3.3V; Manufacturer: Espressif Systems; Manufacturer Part Number: ESP32-S3-WROOM-1-N16R8; Supplier 1: Digi-Key; RoHS: No; Category: Uncategorized; Stock 1: 423; Pricing 1: 1=4.29000 (USD); Supplier Part Number 1: 1965-ESP32-S3-WROOM-1-N16R8CT-ND; LCSC Part Number: C2913202; Item Type: Module; ComponentLink1Description: LCSC; ComponentLink1URL: https://www.lcsc.com/product-detail/WiFi-Modules_Espressif-Systems-ESP32-S3-WROOM-1-N16R8_C2913202.html
footprint 41-SMD Module
pins: 1 GND, 2 3V3, 3 EN, 4 IO4, 5 IO5, 6 IO6, 7 IO7, 8 IO15, 9 IO16, 10 IO17, 11 IO18, 12 IO8, 13 IO19, 14 IO20, 15 IO3, 16 IO46, 17 IO9, 18 IO10, 19 IO11, 20 IO12, 21 IO13, 22 IO14, 23 IO21, 24 IO47, 25 IO48, 26 IO45, 27 IO0, 28 IO35 , 29 IO36 , 30 IO37, 31 IO38, 32 IO39, 33 IO40, 34 IO41, 35 IO42, 36 RXD0, 37 TXD0, 38 IO2, 39 IO1, 40 GND, 41 GND

## ESP32-S3-WROOM-1U-N4
designator U?
RF TXRX MOD WIFI SURFACE MOUNT; Manufacturer: Espressif Systems; Manufacturer Part Number: ESP32-S3-WROOM-1U-N4; Item Type: Module; Supplier 1: Digi-Key; RoHS: No; Category: Uncategorized; Stock 1: 594; Pricing 1: 1=3.25000 (USD); Supplier Part Number 1: 1965-ESP32-S3-WROOM-1U-N4CT-ND; ComponentLink1Description: LCSC; ComponentLink1URL: https://www.lcsc.com/product-detail/WiFi-Modules_Espressif-Systems-ESP32-WROOM-32-N4_C82899.html; LCSC Part Number: C2980296
footprint 41-SMD UFL Module
pins: 1 GND, 2 3V3, 3 EN, 4 IO4, 5 IO5, 6 IO6, 7 IO7, 8 IO15, 9 IO16, 10 IO17, 11 IO18, 12 IO8, 13 IO19, 14 IO20, 15 IO3, 16 IO46, 17 IO9, 18 IO10, 19 IO11, 20 IO12, 21 IO13, 22 IO14, 23 IO21, 24 IO47, 25 IO48, 26 IO45, 27 IO0, 28 IO35, 29 IO36, 30 IO37, 31 IO38, 32 IO39, 33 IO40, 34 IO41, 35 IO42, 36 RXD0, 37 TXD0, 38 IO2, 39 IO1, 40 GND, 41 GND

## ESP32-S3-WROOM-1U-N8R2
designator U?
RF TXRX MOD BT WIFIU.FL SMD; Manufacturer: Espressif Systems; Manufacturer Part Number: ESP32-S3-WROOM-1U-N8R2; Item Type: Module; Supplier: Digikey; LCSC Part Number: 1965-ESP32-S3-WROOM-1U-N8R2CT-ND; RoHS: No; Stock: 6440; Pricing: 1=5.71, 10=4.941, 25=4.6748, 100=4.3087, 250=4.0894 (USD)
footprint 41-SMD UFL Module
pins: 1 GND, 2 3V3, 3 EN, 4 IO4, 5 IO5, 6 IO6, 7 IO7, 8 IO15, 9 IO16, 10 IO17, 11 IO18, 12 IO8, 13 IO19, 14 IO20, 15 IO3, 16 IO46, 17 IO9, 18 IO10, 19 IO11, 20 IO12, 21 IO13, 22 IO14, 23 IO21, 24 IO47, 25 IO48, 26 IO45, 27 IO0, 28 IO35, 29 IO36, 30 IO37, 31 IO38, 32 IO39, 33 IO40, 34 IO41, 35 IO42, 36 RXD0, 37 TXD0, 38 IO2, 39 IO1, 40 GND, 41 GND

## ESP32-S3-WROOM-1U-N8R8
designator U?
RF TXRX MOD BLUETOOTH U.FL SMD; Manufacturer: Espressif Systems; Manufacturer Part Number: ESP32-S3-WROOM-1U-N8R8; Item Type: Module; Supplier: Digikey; Supplier Part Number: 1965-ESP32-S3-WROOM-1U-N8R8CT-ND; RoHS: No; Category: Uncategorized; Stock: 1690; Pricing: 1=3.62 (USD); LCSC Part Number: C2980300
footprint 41-SMD UFL Module
pins: 1 GND, 2 3V3, 3 EN, 4 IO4, 5 IO5, 6 IO6, 7 IO7, 8 IO15, 9 IO16, 10 IO17, 11 IO18, 12 IO8, 13 IO19, 14 IO20, 15 IO3, 16 IO46, 17 IO9, 18 IO10, 19 IO11, 20 IO12, 21 IO13, 22 IO14, 23 IO21, 24 IO47, 25 IO48, 26 IO45, 27 IO0, 28 IO35, 29 IO36, 30 IO37, 31 IO38, 32 IO39, 33 IO40, 34 IO41, 35 IO42, 36 RXD0, 37 TXD0, 38 IO2, 39 IO1, 40 GND, 41 GND

## ESP32-S3-WROOM-1U-N16R8
designator U?
RF TXRX MOD BLUETOOTH U.FL SMD; Manufacturer: Espressif Systems; Manufacturer Part Number: ESP32-S3-WROOM-1U-N16R8; Item Type: IC; Supplier: Digikey; LCSC Part Number: C3013946; RoHS: No; Stock: 3681; Pricing: 1=3.9 (USD)
footprint 41-SMD UFL Module
pins: 1 GND, 2 3V3, 3 EN, 4 IO4, 5 IO5, 6 IO6, 7 IO7, 8 IO15, 9 IO16, 10 IO17, 11 IO18, 12 IO8, 13 IO19, 14 IO20, 15 IO3, 16 IO46, 17 IO9, 18 IO10, 19 IO11, 20 IO12, 21 IO13, 22 IO14, 23 IO21, 24 IO47, 25 IO48, 26 IO45, 27 IO0, 28 IO35, 29 IO36, 30 IO37, 31 IO38, 32 IO39, 33 IO40, 34 IO41, 35 IO42, 36 RXD0, 37 TXD0, 38 IO2, 39 IO1, 40 GND, 41 GND

## ESP32-WROOM-32
designator U?
Module WiFi Modules ROHS; Manufacturer: Espressif Systems; Manufacturer Part Number: ESP32-WROOM-32; ComponentLink1Description: JLCPCB; ComponentLink1URL: https://jlcpcb.com/partdetail/EspressifSystems-ESP32_WROOM32/C95209; Package: Custom; JLC Part Number: C95209; Item Type: Module
footprint 38-SMD Module
part A pins: 1 GND, 2 3V3, 3 EN, 4 SENSOR_VP, 5 SENSOR_VN, 6 IO34, 7 IO35, 8 IO32, 9 IO33, 10 IO25, 11 IO26, 12 IO27, 13 IO14, 14 IO12, 15 GND, 16 IO13, 17 SD2, 18 SD3, 19 CMD, 20 CLK, 21 SD0, 22 SD1, 23 IO15, 24 IO2, 25 IO0, 26 IO4, 27 IO16, 28 IO17, 29 IO5, 30 IO18, 31 IO19, 32 NC, 33 IO21, 34 RXD0, 35 TXD0, 36 IO22, 37 IO23, 38 GND
part B pins: 39 GND, 40 GND, 41 GND, 42 GND, 43 GND, 44 GND, 45 GND, 46 GND, 47 GND

## ESP32-WROOM-32E-N4
designator U?
RX TXRX MOD WIFI TRACE ANT SMD; Manufacturer: Espressif Systems; Manufacturer Part Number: ESP32-WROOM-32E-N4; Supplier 1: Digi-Key; RoHS: No; Pricing 1: 1=3.00000 (USD); Supplier Part Number 1: 1965-ESP32-WROOM-32E(4MB)CT-ND
footprint 38-SMD Module
part A pins: 1 GND, 2 3V3, 3 EN, 4 SENSOR_VP, 5 SENSOR_VN, 6 IO34, 7 IO35, 8 IO32, 9 IO33, 10 IO25, 11 IO26, 12 IO27, 13 IO14, 14 IO12, 15 GND, 16 IO13, 17 NC, 18 NC, 19 NC, 20 NC, 21 NC, 22 NC, 23 IO15, 24 IO2, 25 IO0, 26 IO4, 27 IO16, 28 IO17, 29 IO5, 30 IO18, 31 IO19, 32 NC, 33 IO21, 34 RXD0, 35 TXD0, 36 IO22, 37 IO23, 38 GND, 39 GND
part B pins: 40 GND, 41 GND, 42 GND, 43 GND, 44 GND, 45 GND, 46 GND, 47 GND
part A text: ESP32-WROOM-32E (4MB) /

## ESP32-WROOM-32E-N8
designator U?
SMD,18x25.5mm WiFi Modules ROHS; Manufacturer: Espressif Systems; Manufacturer Part Number: ESP32-WROOM-32E-N8; Item Type: Module; Supplier 1: Mouser; RoHS: No; Category: Uncategorized; Stock 1: 24616; Pricing 1: 1=3.30000, 10=3.30000, 50=3.30000, 100=3.30000, 1000=3.30000, 10000=3.30000 (USD); Supplier Part Number 1: 356-ESP32WRM32E164PH; LCSC Part Number: C701342; ComponentLink1Description: LCSC; ComponentLink1URL: https://www.lcsc.com/product-detail/WiFi-Modules_Espressif-Systems-ESP32-WROOM-32E-N8_C701342.html
footprint 38-SMD Module
part A pins: 1 GND, 2 3V3, 3 EN, 4 SENSOR_VP, 5 SENSOR_VN, 6 IO34, 7 IO35, 8 IO32, 9 IO33, 10 IO25, 11 IO26, 12 IO27, 13 IO14, 14 IO12, 15 GND, 16 IO13, 17 NC, 18 NC, 19 NC, 20 NC, 21 NC, 22 NC, 23 IO15, 24 IO2, 25 IO0, 26 IO4, 27 IO16, 28 IO17, 29 IO5, 30 IO18, 31 IO19, 32 NC, 33 IO21, 34 RXD0, 35 TXD0, 36 IO22, 37 IO23, 38 GND, 39 GND
part B pins: 40 GND, 41 GND, 42 GND, 43 GND, 44 GND, 45 GND, 46 GND, 47 GND

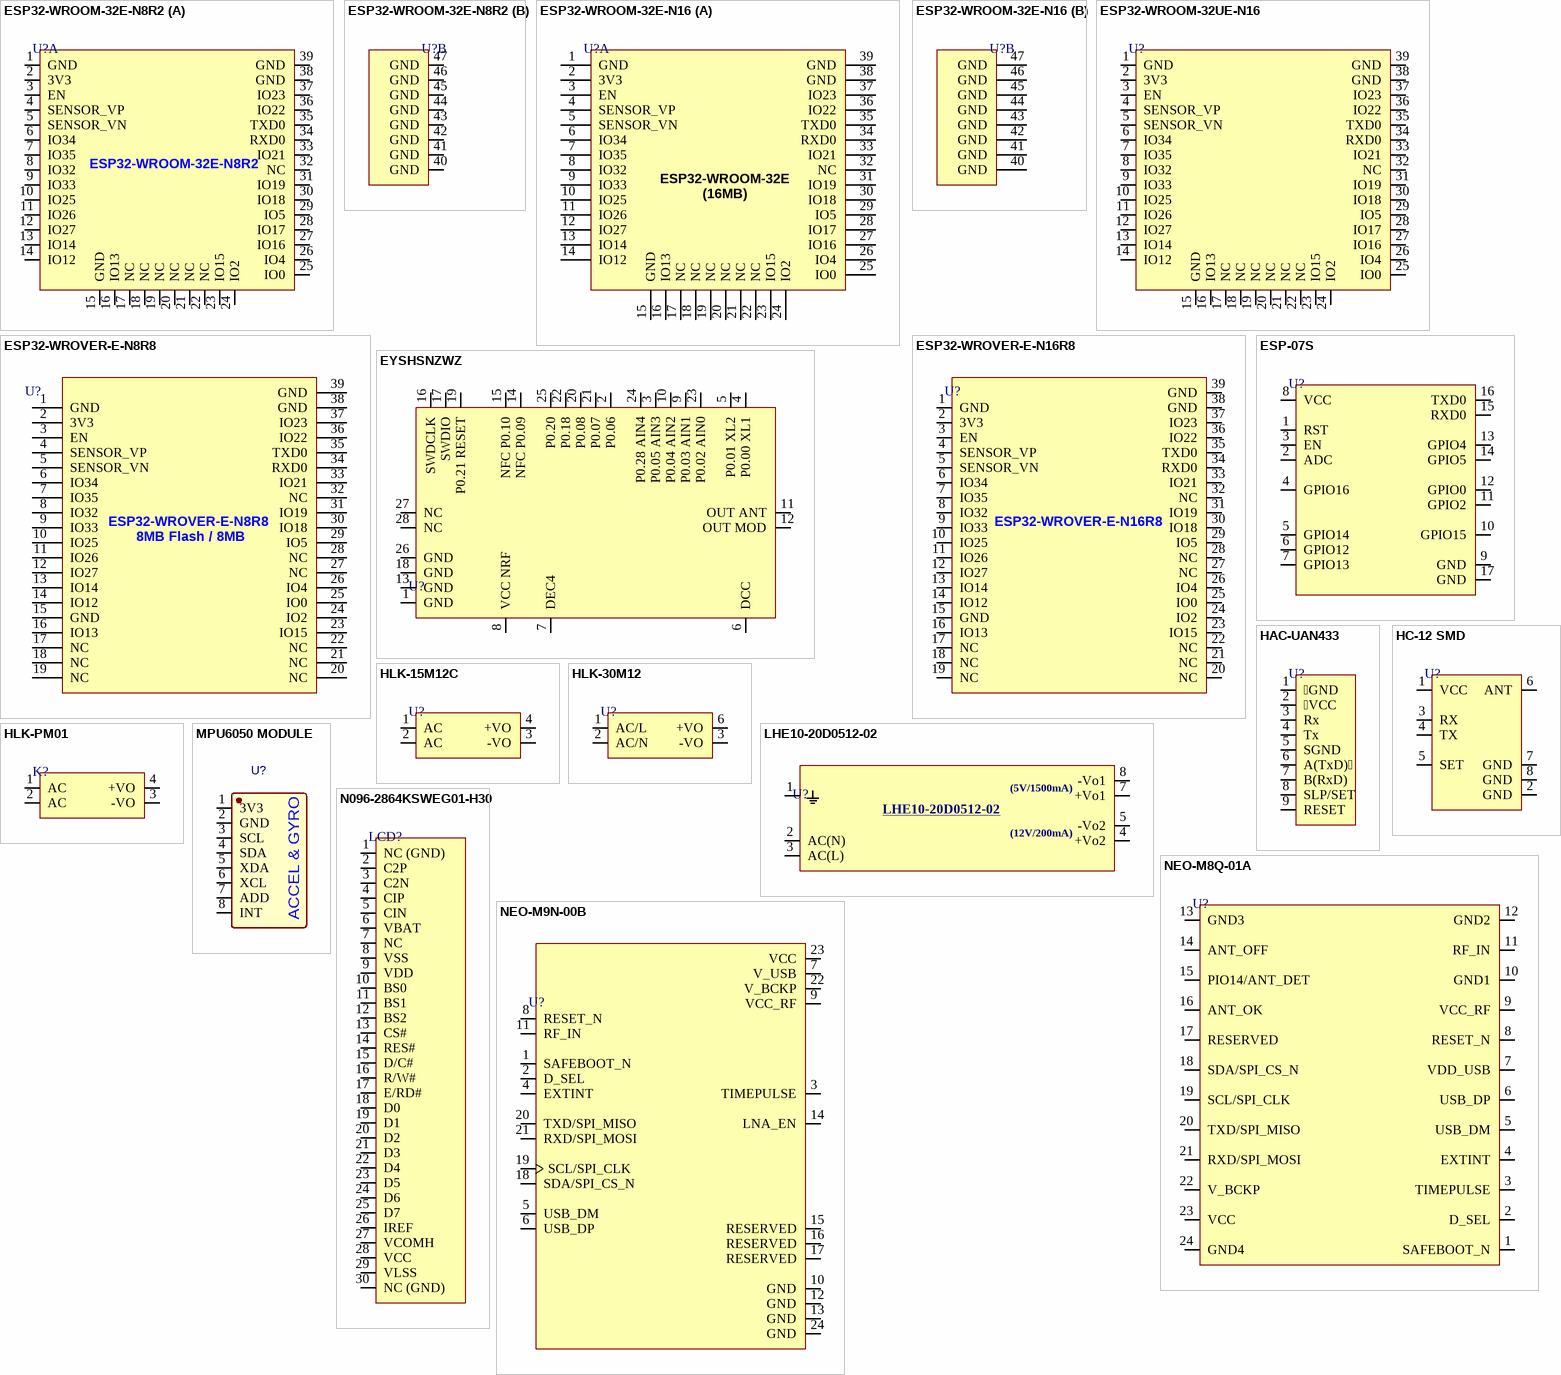
[diagram p3: symbols ESP32-WROOM-32E-N8R2 to NEO-M9N-00B]

## ESP32-WROOM-32E-N8R2
designator U?
RF TXRX MODULE BT PCB TRACE SMD; Manufacturer: Espressif Systems; Manufacturer Part Number: ESP32-WROOM-32E-N8R2; Supplier: Digikey; Supplier Part Number: 1965-ESP32-WROOM-32E-N8R2DKR-ND; RoHS: No; Category: Uncategorized; Pricing: 1=2.88 (USD); LCSC Part Number: C5361945; Item Type: Module
footprint 38-SMD Module
part A pins: 1 GND, 2 3V3, 3 EN, 4 SENSOR_VP, 5 SENSOR_VN, 6 IO34, 7 IO35, 8 IO32, 9 IO33, 10 IO25, 11 IO26, 12 IO27, 13 IO14, 14 IO12, 15 GND, 16 IO13, 17 NC, 18 NC, 19 NC, 20 NC, 21 NC, 22 NC, 23 IO15, 24 IO2, 25 IO0, 26 IO4, 27 IO16, 28 IO17, 29 IO5, 30 IO18, 31 IO19, 32 NC, 33 IO21, 34 RXD0, 35 TXD0, 36 IO22, 37 IO23, 38 GND, 39 GND
part B pins: 40 GND, 41 GND, 42 GND, 43 GND, 44 GND, 45 GND, 46 GND, 47 GND

## ESP32-WROOM-32E-N16
designator U?
RX TXRX MOD WIFI TRACE ANT SMD; Manufacturer: Espressif Systems; Manufacturer Part Number: ESP32-WROOM-32E-N16; Item Type: IC; Supplier 1: Digi-Key; RoHS: No; Category: Uncategorized; Stock 1: 16240; Pricing 1: 1=3.60000 (USD); LCSC Part Number: C701343; Supplier Part Number 1: 1965-ESP32-WROOM-32E-N16CT-ND
footprint 38-SMD Module
part A pins: 1 GND, 2 3V3, 3 EN, 4 SENSOR_VP, 5 SENSOR_VN, 6 IO34, 7 IO35, 8 IO32, 9 IO33, 10 IO25, 11 IO26, 12 IO27, 13 IO14, 14 IO12, 15 GND, 16 IO13, 17 NC, 18 NC, 19 NC, 20 NC, 21 NC, 22 NC, 23 IO15, 24 IO2, 25 IO0, 26 IO4, 27 IO16, 28 IO17, 29 IO5, 30 IO18, 31 IO19, 32 NC, 33 IO21, 34 RXD0, 35 TXD0, 36 IO22, 37 IO23, 38 GND, 39 GND
part B pins: 40 GND, 41 GND, 42 GND, 43 GND, 44 GND, 45 GND, 46 GND, 47 GND
part A text: ESP32-WROOM-32E (16MB) /

## ESP32-WROOM-32UE-N16
designator U?
RF TXRX MOD BLUETOOTH U.FL SMD; Manufacturer: Espressif Systems; Manufacturer Part Number: ESP32-WROOM-32UE-N16; Item Type: IC; Supplier: Digikey; Supplier Part Number: 1965-ESP32-WROOM-32UE-N16CT-ND; RoHS: No; Category: Uncategorized; Stock: 11669; Pricing: 1=3 (USD); LCSC Part Number: C701346
footprint ESP32-WROOM-32UE-N16
pins: 1 GND, 2 3V3, 3 EN, 4 SENSOR_VP, 5 SENSOR_VN, 6 IO34, 7 IO35, 8 IO32, 9 IO33, 10 IO25, 11 IO26, 12 IO27, 13 IO14, 14 IO12, 15 GND, 16 IO13, 17 NC, 18 NC, 19 NC, 20 NC, 21 NC, 22 NC, 23 IO15, 24 IO2, 25 IO0, 26 IO4, 27 IO16, 28 IO17, 29 IO5, 30 IO18, 31 IO19, 32 NC, 33 IO21, 34 RXD0, 35 TXD0, 36 IO22, 37 IO23, 38 GND, 39 GND

## ESP32-WROVER-E-N8R8
designator U?
RF TXRX MOD WIFI PCB TRACE SMD; Manufacturer: Espressif Systems; Manufacturer Part Number: ESP32-WROVER-E-N8R8; Item Type: Module; Supplier 1: Digi-Key; RoHS: No; Category: Uncategorized; Stock 1: 16752; Pricing 1: 1=3.60000 (USD); Supplier Part Number 1: 1965-ESP32-WROVER-E-N8R8CT-ND; LCSC Part Number: C2973667; ComponentLink1Description: LCSC; ComponentLink1URL: https://www.lcsc.com/product-detail/WiFi-Modules_Espressif-Systems-ESP32-WROVER-E-N8R8_C2973667.html
footprint ESP32-WROVER-E-N8R8
pins: 1 GND, 2 3V3, 3 EN, 4 SENSOR_VP, 5 SENSOR_VN, 6 IO34, 7 IO35, 8 IO32, 9 IO33, 10 IO25, 11 IO26, 12 IO27, 13 IO14, 14 IO12, 15 GND, 16 IO13, 17 NC, 18 NC, 19 NC, 20 NC, 21 NC, 22 NC, 23 IO15, 24 IO2, 25 IO0, 26 IO4, 27 NC, 28 NC, 29 IO5, 30 IO18, 31 IO19, 32 NC, 33 IO21, 34 RXD0, 35 TXD0, 36 IO22, 37 IO23, 38 GND, 39 GND
text: ESP32-WROVER-E-N8R8 / 8MB Flash / 8MB PSRAM

## ESP32-WROVER-E-N16R8
designator U?
RF TXRX MODULE BT PCB TRACE SMD; Manufacturer: Espressif Systems; Manufacturer Part Number: ESP32-WROVER-E-N16R8; Supplier: Digi-Key; Supplier Part Number: 1965-ESP32-WROVER-E-N16R8CT-ND; RoHS: No; Category: Uncategorized; Stock: 11720; Pricing: 1=3.28 (USD); LCSC Part Number: C529589; Item Type: Module
footprint ESP32-WROVER-E-N16R8
pins: 1 GND, 2 3V3, 3 EN, 4 SENSOR_VP, 5 SENSOR_VN, 6 IO34, 7 IO35, 8 IO32, 9 IO33, 10 IO25, 11 IO26, 12 IO27, 13 IO14, 14 IO12, 15 GND, 16 IO13, 17 NC, 18 NC, 19 NC, 20 NC, 21 NC, 22 NC, 23 IO15, 24 IO2, 25 IO0, 26 IO4, 27 NC, 28 NC, 29 IO5, 30 IO18, 31 IO19, 32 NC, 33 IO21, 34 RXD0, 35 TXD0, 36 IO22, 37 IO23, 38 GND, 39 GND

## ESP-07S
designator U?
-98dBm 19.5dBm ESP8266芯片 板载PCBAntenna 2.4GHz SMD,16x17mm WiFi Modules ROHS; Manufacturer: Ai-Thinker; Manufacturer Part Number: ESP-07S; Item Type: Module; Package: SMD,16x17mm; LCSC Part Number: C82895; ComponentLink1Description: LCSC; ComponentLink1URL: https://www.lcsc.com/product-detail/WiFi-Modules_Ai-Thinker-ESP-07S_C82895.html
footprint ESP-07S
pins: 1 RST, 2 ADC, 3 EN, 4 GPIO16, 5 GPIO14, 6 GPIO12, 7 GPIO13, 8 VCC, 9 GND, 10 GPIO15, 11 GPIO2, 12 GPIO0, 13 GPIO4, 14 GPIO5, 15 RXD0, 16 TXD0, 17 GND

## EYSHSNZWZ
designator U?
RF TXRX MODULE BT TRACE ANT SMD; Manufacturer: Taiyo Yuden; Manufacturer Part Number: EYSHSNZWZ; Interface: UART; Frequency: 2.4GHz; Data Rate: 1Mbps; Sensitivity: -94dBm; Memory Size: 64KB; Current - Receiving: 11.7mA; Current - Transmitting: 16mA; Supplier: Farnell; Supplier Part Number: 2889504; RoHS: Yes; Category: RF Receivers, Transceivers; Pricing: 1=14.18, 10=11.82 (GBP); Mounting Technology: Surface Mount; Case/Package: Module; Min Operating Temperature: -40°C; Max Operating Temperature: 85°C; Packaging: Cut Tape; Series: EYSHSN; RoHS Compliant: Yes; ComponentLink1URL: http://www.yuden.co.jp/to/b0060?src-supplier=Digi-Key; ComponentLink1Description: http://www.yuden.co.jp/to/b0060?src-supplier=Digi-Key
footprint EYSHSNZWZ
pins: 1 GND, 2 P0.06, 3 P0.05 AIN3, 4 P0.00 XL1, 5 P0.01 XL2, 6 DCC, 7 DEC4, 8 VCC NRF, 9 P0.03 AIN1, 10 P0.04 AIN2, 11 OUT ANT, 12 OUT MOD, 13 GND, 14 NFC P0.09, 15 NFC P0.10, 16 SWDCLK, 17 SWDIO, 18 GND, 19 P0.21 RESET, 20 P0.08, 21 P0.07, 22 P0.18, 23 P0.02 AIN0, 24 P0.28 AIN4, 25 P0.20, 26 GND, 27 NC, 28 NC

## HAC-UAN433
designator U?
Mhz 433 500mw 1km transmisor-receptor; Manufacturer Part Number: HAC-UAN433; Manufacturer: Shenzhen HAC TelecomTechnology CO., Ltd.; Item Type: Module; ComponentLink1Description: Alibaba; ComponentLink1URL: https://chinese.alibaba.com/product-detail/433-mhz-500mw-1km-reach-transceivers-300003399987.html
footprint HAC-UAN433
pins: 1 GND, 2 VCC, 3 Rx, 4 Tx, 5 SGND, 6 A(TxD), 7 B(RxD), 8 SLP/SET, 9 RESET

## HC-12 SMD
designator U?
HC12 Si4463 433MHZ RF Wireless Serial Module; Manufacturer Part Number: HC-12; Package: Custom; Item Type: Module
footprint HC-12 Module SMD
pins: 1 VCC, 2 GND, 3 RX, 4 TX, 5 SET, 6 ANT, 7 GND, 8 GND

## HLK-15M12C
designator U?
12V 1250mA 85VAC~268VAC 15W AC-DC 83% Plugin,47.5x28.5x22mm Power Modules ROHS; Manufacturer: HI-LINK; Manufacturer Part Number: HLK-15M12C; ComponentLink1Description: LCSC; ComponentLink1URL: https://www.lcsc.com/product-detail/Power-Modules_HI-LINK-HLK-15M12C_C18203065.html; Package: Plugin,47.5x28.5x22mm; LCSC Part Number: C18203065; Item Type: Power Module
footprint HLK-15M12C
pins: 1 AC, 2 AC, 3 -VO, 4 +VO

## HLK-30M12
designator U?
AC-DC Power Modules ROHS; Manufacturer: Hi-Link; Manufacturer Part Number: HLK-30M12; Item Type: Module; Supplier: LCSC; LCSC Part Number: C2761166; RoHS: No; ComponentLink1Description: LCSC; ComponentLink1URL: https://www.lcsc.com/product-detail/AC-DC-Power-Modules_HI-LINK-HLK-30M12_C2761166.html
footprint HLK-30M12
pins: 1 AC/L, 2 AC/N, 3 -VO, 6 +VO

## HLK-PM01
designator K?
5V 0.6A 90VAC~265VAC 120V~350V 3W AC-DC 73% Plugin Power Modules ROHS; Manufacturer: HI-LINK; Manufacturer Part Number: HLK-PM01; Item Type: Relay; Package: Plugin; LCSC Part Number: C209903; ComponentLink1Description: LCSC; ComponentLink1URL: https://www.lcsc.com/product-detail/Power-Modules_HI-LINK-HLK-PM01_C209903.html
footprint HLK-PM01
pins: 1 AC, 2 AC, 3 -VO, 4 +VO

## LHE10-20D0512-02
designator U?
Power supply module ROHS; Manufacturer: LZTEC; Manufacturer Part Number: LHE10-20D0512-02; Package: Custom; LCSC Part Number: C19192878; Item Type: Module; ComponentLink1Description: LCSC; ComponentLink1URL: https://www.lcsc.com/product-detail/Power-supply-module_LZTEC-LHE10-20D0512-02_C19192878.html
footprint LHE10-20D0512-02
pins: 1, 2 AC(N), 3 AC(L), 4 +Vo2, 5 -Vo2, 7 +Vo1, 8 -Vo1
text: (5V/1500mA); (12V/200mA)

## MPU6050 MODULE
designator U?
GY-521 6DOF 3 Axis Analog Gyro Sensor + 3 Axis Accelerometer Module; Manufacturer Part Number: MPU6050; Contributor: jofenix; Supplier: Aliexpress; spicePre: U; spiceSymbolName: MPU6050 MODULE
footprint MPU6050_
pins: 1 3V3, 2 GND, 3 SCL, 4 SDA, 5 XDA, 6 XCL, 7 ADD, 8 INT
text: ACCEL & GYRO

## N096-2864KSWEG01-H30
designator LCD?
SSD1306 0.96 - OLED Displays Modules ROHS; Manufacturer: Newvisio; Manufacturer Part Number: N096-2864KSWEG01-H30; LCSC Part Number: C2890596; Item Type: OLED Displays Module
footprint N096-2864KSWEG01-H30
pins: 1 NC (GND), 2 C2P, 3 C2N, 4 CIP, 5 CIN, 6 VBAT, 7 NC, 8 VSS, 9 VDD, 10 BS0, 11 BS1, 12 BS2, 13 CS#, 14 RES#, 15 D/C#, 16 R/W#, 17 E/RD#, 18 D0, 19 D1, 20 D2, 21 D3, 22 D4, 23 D5, 24 D6, 25 D7, 26 IREF, 27 VCOMH, 28 VCC, 29 VLSS, 30 NC (GND)

## NEO-M8Q-01A
designator U?
Rf Receiver Gnss/gps 1.575GHZ; Manufacturer: u-blox; Manufacturer Part Number: NEO-M8Q-01A; Item Type: Module; Interface: I2C,SPI,USB,UART; Sensitivity: -167dBm; ComponentLink1URL: https://www.u-blox.com/sites/default/files/NEO-M8Q-01A_DataSheet_%28UBX-15013820%29.pdf?src-supplier=Digikey; ComponentLink1Description: https://www.u-blox.com/sites/default/files/NEO-M8Q-01A_DataSheet_%28UBX-15013820%29.pdf?src-supplier=Digikey; Supplier: Digikey; Supplier Part Number: 672-1174-1-ND; RoHS: Yes; Category: RF Receivers, Transceivers; Stock: 322; Pricing: 1=25, 10=20.244 (USD); Mounting Technology: Surface Mount; Case/Package: SMD/SMT; Min Operating Temperature: -40°C; Max Operating Temperature: 105°C; Frequency: 1.575GHz; Series: NEO-M8Q-01A; RoHS Compliant: Yes
footprint NEO-M8Q-01A
pins: 1 SAFEBOOT_N, 2 D_SEL, 3 TIMEPULSE, 4 EXTINT, 5 USB_DM, 6 USB_DP, 7 VDD_USB, 8 RESET_N, 9 VCC_RF, 10 GND1, 11 RF_IN, 12 GND2, 13 GND3, 14 ANT_OFF, 15 PIO14/ANT_DET, 16 ANT_OK, 17 RESERVED, 18 SDA/SPI_CS_N, 19 SCL/SPI_CLK, 20 TXD/SPI_MISO, 21 RXD/SPI_MOSI, 22 V_BCKP, 23 VCC, 24 GND4

## NEO-M9N-00B
designator U?
M9 STANDARD PRECISION GNSS MOD; Manufacturer: u-blox; Manufacturer Part Number: NEO-M9N-00B; Item Type: Module; Supplier: Avnet; Supplier Part Number: NEO-M9N-00B; RoHS: Yes; Stock: 250; Pricing: 250=15.92583, 500=15.54578, 1000=15.17333, 1500=14.79716, 2000=14.42092 (USD)
footprint NEO-M9N-00B
pins: 1 SAFEBOOT_N, 2 D_SEL, 3 TIMEPULSE, 4 EXTINT, 5 USB_DM, 6 USB_DP, 7 V_USB, 8 RESET_N, 9 VCC_RF, 10 GND, 11 RF_IN, 12 GND, 13 GND, 14 LNA_EN, 15 RESERVED, 16 RESERVED, 17 RESERVED, 18 SDA/SPI_CS_N, 19 SCL/SPI_CLK, 20 TXD/SPI_MISO, 21 RXD/SPI_MOSI, 22 V_BCKP, 23 VCC, 24 GND

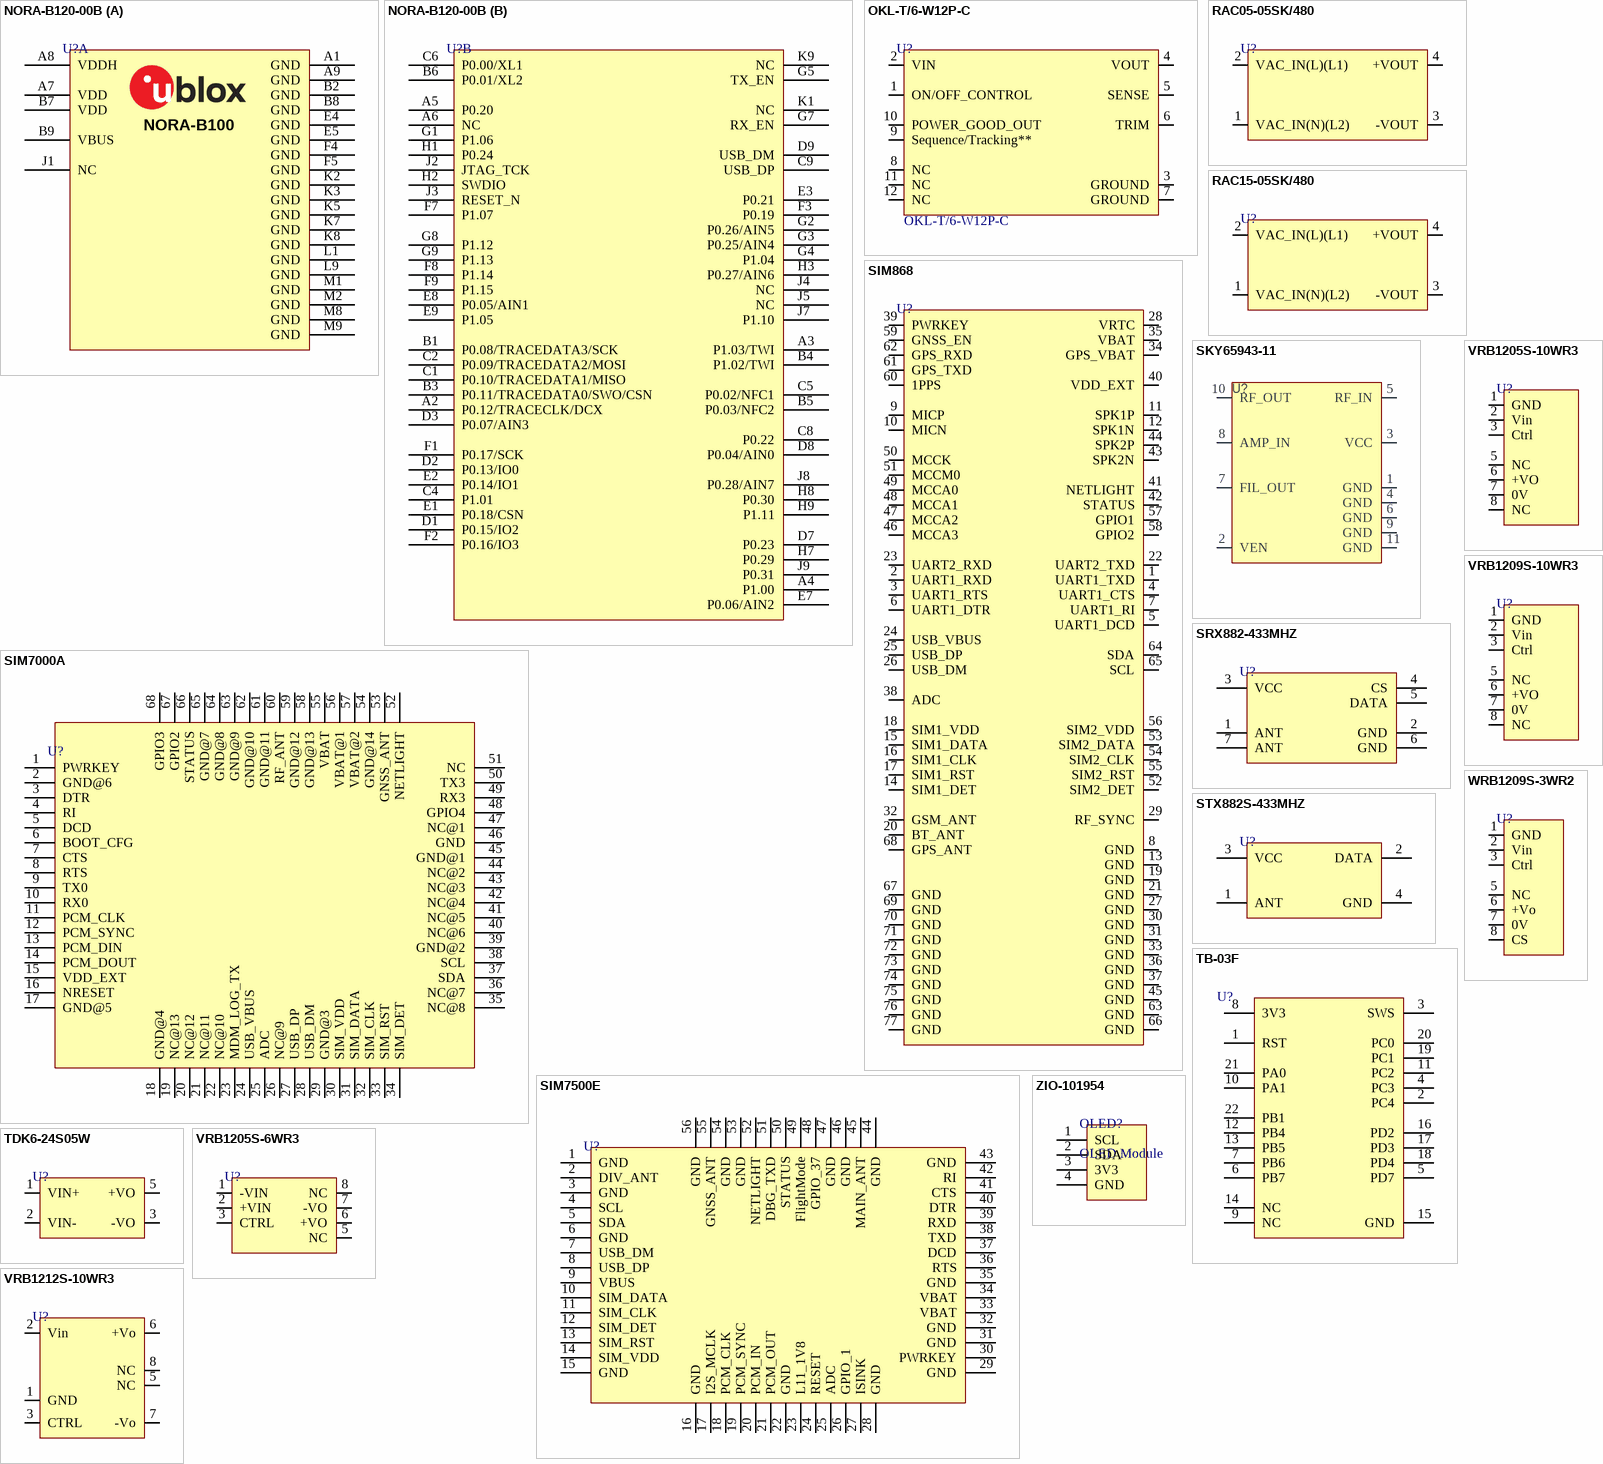
[diagram p4: symbols NORA-B120-00B to ZIO-101954]

## NORA-B120-00B
designator U?
RF TXRX MOD BT /ANTU.FL SMD; Manufacturer: u-blox; Manufacturer Part Number: NORA-B120-00B; Description: Bluetooth Low Energy Module, stand-alone, U.FL connector, open CPU, 10.4x14.3 mm, 500 pcs/reel; Item Type: Module; Max Supply Voltage: 3.6V; Min Supply Voltage: 1.7V; Operating Supply Voltage: 3.3V; Supplier: Avnet; Supplier Part Number: NORA-B120-00B; RoHS: Compliant; Stock: 500; Pricing: 500=11.22667, 1000=11.00654, 2000=10.85052, 4000=10.69886, 8000=10.525 (USD); Height - Seated (Max): 1.9mm; Length: 14.3mm; Lifecycle Status: Production; Max Operating Temperature: 105°C; Min Operating Temperature: -40°C; Number of Terminals: 82; Terminal Pitch: 1.1mm; Width: 10.4mm; ComponentLink1URL: https://datasheet.octopart.com:443/NORA-B120-00B-u-blox-datasheet-175595538.pdf?src-supplier=IHS; ComponentLink1Description: https://datasheet.octopart.com:443/NORA-B120-00B-u-blox-datasheet-175595538.pdf?src-supplier=IHS; ComponentLink2URL: https://datasheet.octopart.com:443/NORA-B120-00B-u-blox-datasheet-166811452.pdf?src-supplier=TME; ComponentLink2Description: https://datasheet.octopart.com:443/NORA-B120-00B-u-blox-datasheet-166811452.pdf?src-supplier=TME; ComponentLink3URL: https://datasheet.octopart.com:443/NORA-B120-00B-u-blox-datasheet-166532002.pdf?src-supplier=TME; ComponentLink3Description: https://datasheet.octopart.com:443/NORA-B120-00B-u-blox-datasheet-166532002.pdf?src-supplier=TME
part A pins: A1 GND (power), A7 VDD (power), A8 VDDH (power), A9 GND (power), B2 GND (power), B7 VDD (power), B8 GND (power), B9 VBUS (power), E4 GND (power), E5 GND (power), F4 GND (power), F5 GND (power), J1 NC, K2 GND (power), K3 GND (power), K5 GND (power), K7 GND (power), K8 GND (power), L1 GND (power), L9 GND (power), M1 GND (power), M2 GND (power), M8 GND (power), M9 GND (power)
part B pins: A2 P0.12/TRACECLK/DCX, A3 P1.03/TWI, A4 P1.00, A5 P0.20, A6 NC, B1 P0.08/TRACEDATA3/SCK, B3 P0.11/TRACEDATA0/SWO/CSN, B4 P1.02/TWI, B5 P0.03/NFC2, B6 P0.01/XL2, C1 P0.10/TRACEDATA1/MISO, C2 P0.09/TRACEDATA2/MOSI, C4 P1.01, C5 P0.02/NFC1, C6 P0.00/XL1, C8 P0.22, C9 USB_DP, D1 P0.15/IO2, D2 P0.13/IO0, D3 P0.07/AIN3, D7 P0.23, D8 P0.04/AIN0, D9 USB_DM, E1 P0.18/CSN, E2 P0.14/IO1, E3 P0.21, E7 P0.06/AIN2, E8 P0.05/AIN1, E9 P1.05, F1 P0.17/SCK, F2 P0.16/IO3, F3 P0.19, F7 P1.07, F8 P1.14, F9 P1.15, G1 P1.06, G2 P0.26/AIN5, G3 P0.25/AIN4, G4 P1.04, G5 TX_EN, G7 RX_EN, G8 P1.12, G9 P1.13, H1 P0.24, H2 SWDIO, H3 P0.27/AIN6, H7 P0.29, H8 P0.30, H9 P1.11, J2 JTAG_TCK, J3 RESET_N, J4 NC, J5 NC, J7 P1.10, J8 P0.28/AIN7, J9 P0.31, K1 NC, K9 NC
part A text: NORA-B100

## OKL-T/6-W12P-C
designator U?
DC DC CONVERTER 0.591-5.5V 30W; Manufacturer: Murata; Manufacturer Part Number: OKL-T/6-W12P-C; Item Type: Board Mount Modules; Supplier: Digikey; Supplier Part Number: 811-3015-1-ND; RoHS: Yes; Stock: 5709; Pricing: 1=6.48, 5=6.39, 10=6.298, 25=6.1128, 50=5.9274, 100=5.7423 (USD); ComponentLink1URL: https://datasheet.ciiva.com/4644/okl-t6-w12-21493-4644197.pdf?src-supplier=Mouser; ComponentLink1Description: https://datasheet.ciiva.com/4644/okl-t6-w12-21493-4644197.pdf?src-supplier=Mouser
footprint OKL-T/6-W12P-C
pins: 1 ON/OFF_CONTROL, 2 VIN, 3 GROUND, 4 VOUT, 5 SENSE, 6 TRIM, 7 GROUND, 8 NC, 9 Sequence/Tracking**, 10 POWER_GOOD_OUT, 11 NC, 12 NC